# Altium schematic symbol library SamacSys.SchLib: 1235 symbols (part 5 of 13)
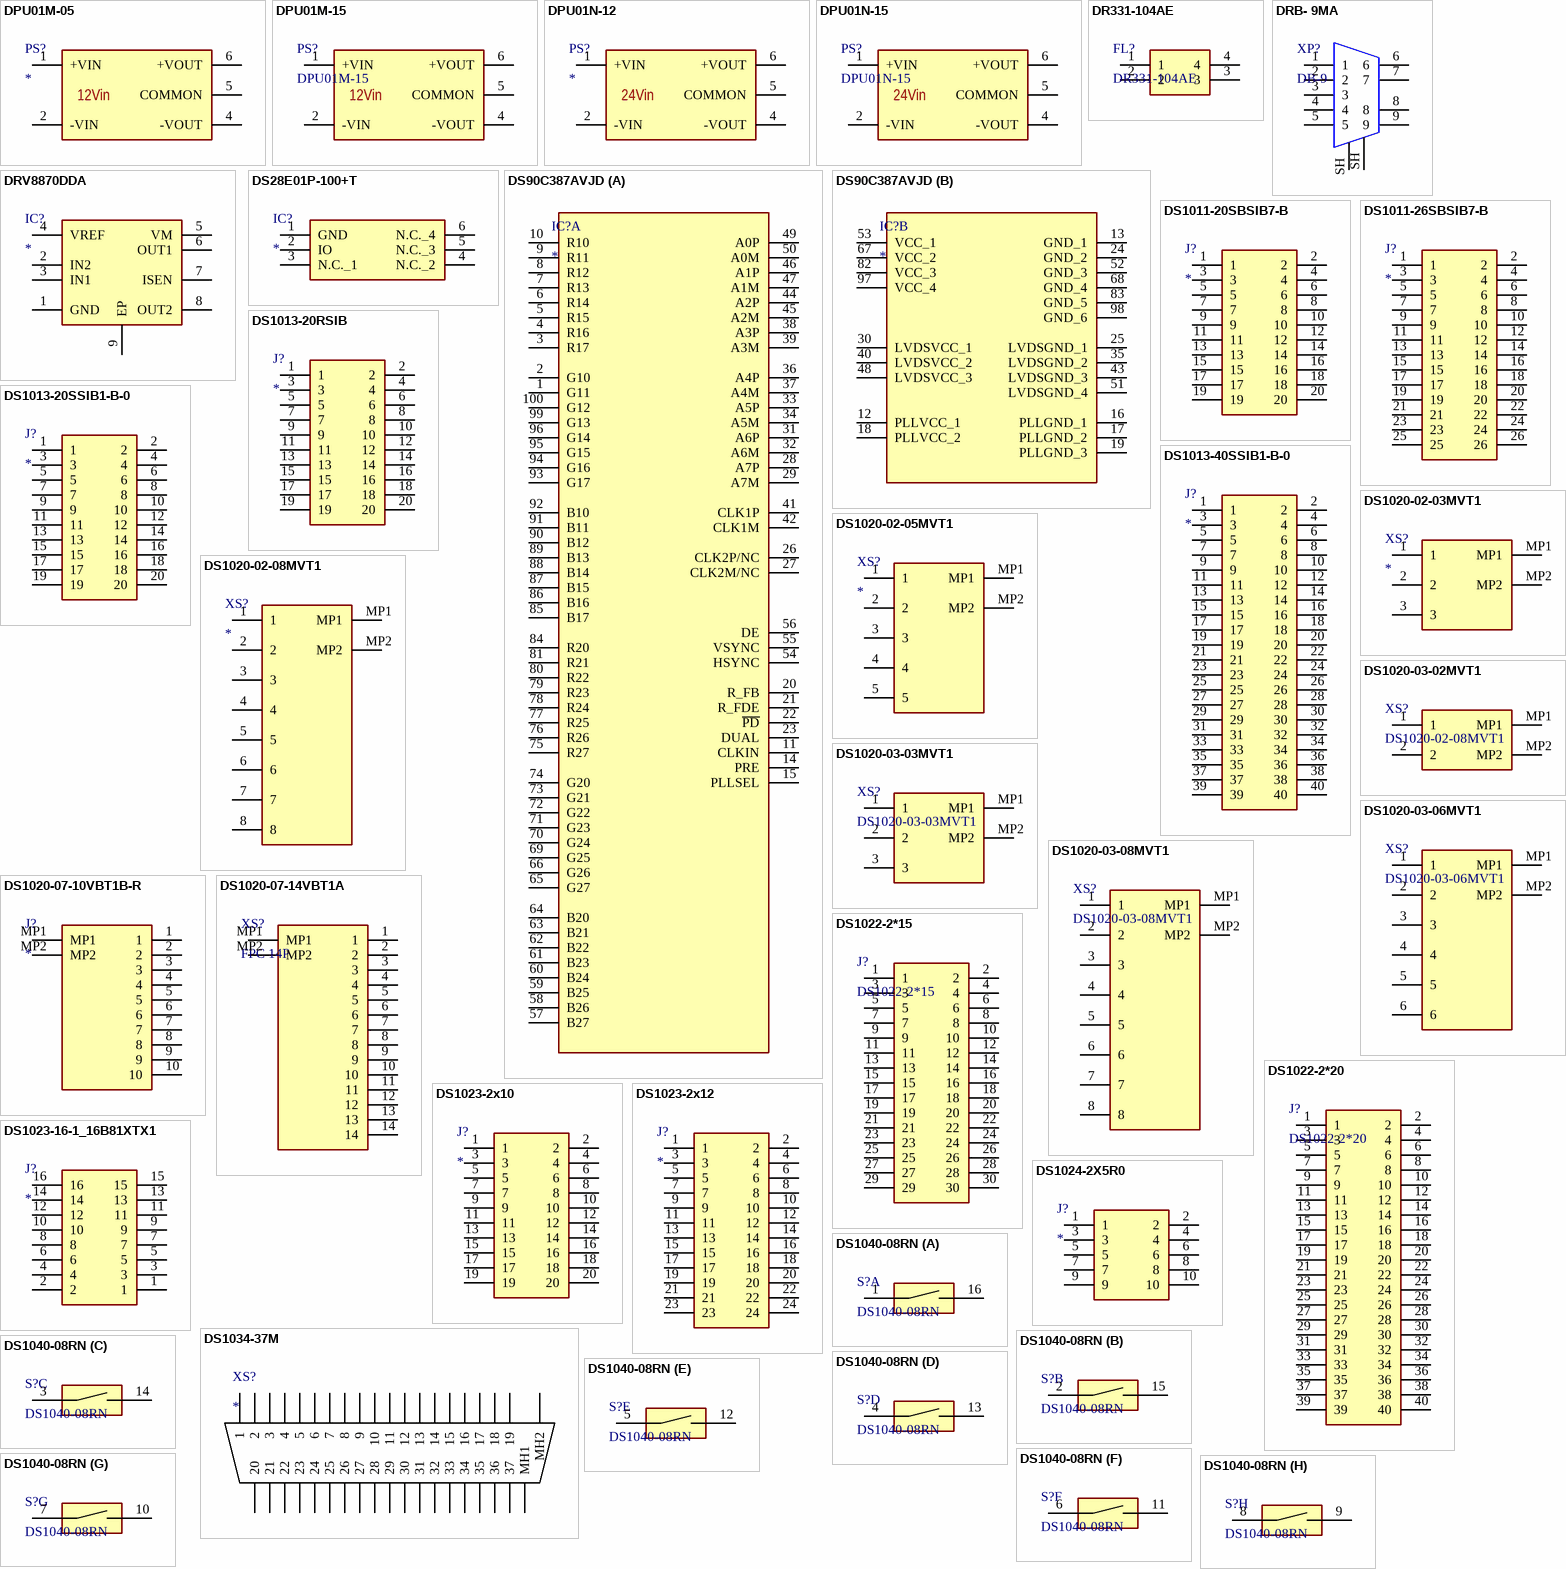
[diagram p49: symbols DPU01M-05 to DS1040-08RN]

## DPU01M-15
designator PS?
PS DC/DC, IN 10.8-13.2VDC, OUT +-15VDC; Manufacturer_Name: Mean Well; Datasheet Link: https://www.arrow.com/en/products/dpu01n-12/mean-well-enterprises; Height: 10.2mm; Manufacturer_Part_Number: DPU01M-15; Mouser Part Number: DPU01M-15; Mouser Price/Stock: https://www.mouser.co.uk/ProductDetail/MEAN-WELL/DPU01N-12?qs=5aG0NVq1C4yTyMl3DWRvqA%3D%3D; Arrow Part Number: DPU01M-15; Arrow Price/Stock: https://www.arrow.com/en/products/dpu01n-12/mean-well-enterprises
footprint DPU01
pins: 1 +VIN, 2 -VIN, 4 -VOUT, 5 COMMON, 6 +VOUT
text: 12Vin

## DPU01N-12
designator PS?
PS DC/DC, IN 21.6-26.4VDC, OUT +-12VDC; Manufacturer_Name: Mean Well; Manufacturer_Part_Number: DPU01N-12; Datasheet Link: https://www.arrow.com/en/products/dpu01n-12/mean-well-enterprises; Height: 10.2mm; Mouser Part Number: 709-DPU01N-12; Mouser Price/Stock: https://www.mouser.co.uk/ProductDetail/MEAN-WELL/DPU01N-12?qs=5aG0NVq1C4yTyMl3DWRvqA%3D%3D; Arrow Part Number: DPU01N-12; Arrow Price/Stock: https://www.arrow.com/en/products/dpu01n-12/mean-well-enterprises
footprint DPU01
pins: 1 +VIN, 2 -VIN, 4 -VOUT, 5 COMMON, 6 +VOUT
text: 24Vin

## DPU01N-15
designator PS?
PS DC/DC, IN 21.6-26.4VDC, OUT +-15VDC; Manufacturer_Name: Mean Well; Datasheet Link: https://www.arrow.com/en/products/dpu01n-12/mean-well-enterprises; Height: 10.2mm; Manufacturer_Part_Number: DPU01N-15; Mouser Part Number: DPU01N-15; Mouser Price/Stock: https://www.mouser.co.uk/ProductDetail/MEAN-WELL/DPU01N-12?qs=5aG0NVq1C4yTyMl3DWRvqA%3D%3D; Arrow Part Number: DPU01N-15; Arrow Price/Stock: https://www.arrow.com/en/products/dpu01n-12/mean-well-enterprises
footprint DPU01
pins: 1 +VIN, 2 -VIN, 4 -VOUT, 5 COMMON, 6 +VOUT
text: 24Vin

## DR331-104AE
designator FL?
CMC 470UH 500MA 2LN SMD; Manufacturer_Name: Bourns; Manufacturer_Part_Number: DR331-105BE; Datasheet Link: http://uk.rs-online.com/web/p/products/8749687; Mouser Part Number: 652-DR331-105BE; Mouser Price/Stock: https://www.mouser.co.uk/ProductDetail/Bourns/DR331-105BE?qs=CrTVAl0CcnKk6%252BoOsQlt3w%3D%3D; Arrow Part Number: DR331-105BE; Arrow Price/Stock: https://www.arrow.com/en/products/dr331-105be/bourns?utm_currency=USD&region=nac
footprint DR331
pins: 1, 2, 3, 4

## DRB- 9MA
designator XP?, comment DB-9
Connector, DB-9, PCB Right Angle; Manufacturer_Name: Connfly; Manufacturer_Part_Number: DBB-9F (DS1034-09F); Datasheet Link: https://static.chipdip.ru/lib/761/DOC000761659.pdf; System: Connector
footprint DRB-9MA_DS1037-9M
pins: 1, 2, 3, 4, 5, 6, 7, 8, 9, SH 9, SH 10

## DRV8870DDA
designator IC?
3.6-A Brushed DC Motor Driver (PWM Control); Manufacturer_Name: Texas Instruments; Manufacturer_Part_Number: DRV8870DDA; Datasheet Link: https://www.ti.com/lit/ds/symlink/drv8870.pdf?ts=1619515567456&ref_url=https%253A%252F%252Fwww.ti.com%252Fmotor-drivers%252Fbrushed-dc-bdc-drivers%252Fproducts.html; Height: 1.7mm; Mouser Part Number: 595-DRV8870DDA; Mouser Price/Stock: https://www.mouser.co.uk/ProductDetail/Texas-Instruments/DRV8870DDA?qs=Fobv33ltQGiS4dfPU1fBcw%3D%3D; Arrow Part Number: DRV8870DDA; Arrow Price/Stock: https://www.arrow.com/en/products/drv8870dda/texas-instruments?region=nac
footprint SOIC127P600X170-9N
pins: 1 GND, 2 IN2, 3 IN1, 4 VREF, 5 VM, 6 OUT1, 7 ISEN, 8 OUT2, 9 EP

## DS28E01P-100+T
designator IC?
Integrated Circuit; Manufacturer_Name: Analog Devices; Manufacturer_Part_Number: DS28E01P-100+T; Datasheet Link: https://datasheets.maximintegrated.com/en/ds/DS28E01-100.pdf; Height: 1.5mm; Mouser Part Number: 700-DS28E01P-100+T; Mouser Price/Stock: https://www.mouser.co.uk/ProductDetail/Analog-Devices-Maxim-Integrated/DS28E01P-100%2bT?qs=U8%2FOE6X5Fv%2F68qF%252BXjcMvQ%3D%3D; Arrow Part Number: DS28E01P-100+T; Arrow Price/Stock: https://www.arrow.com/en/products/ds28e01p-100t/maxim-integrated?region=nac
footprint DS28E01P100T
pins: 1 GND, 2 IO, 3 N.C._1, 4 N.C._2, 5 N.C._3, 6 N.C._4

## DS90C387AVJD
designator IC?
Integrated Circuit; Manufacturer_Name: Texas Instruments; Manufacturer_Part_Number: DS90C387AVJD; Datasheet Link: https://www.ti.com/lit/gpn/DS90C387A; Height: 1.2mm; Mouser Part Number: 926-DS90C387AVJD; Mouser Price/Stock: https://www.mouser.co.uk/ProductDetail/Texas-Instruments/DS90C387AVJD?qs=7X5t%252BdzoRHBiEdfCkch%2FBQ%3D%3D
footprint QFP50P1600X1600X120-100N
part A pins: 1 G11, 2 G10, 3 R17, 4 R16, 5 R15, 6 R14, 7 R13, 8 R12, 9 R11, 10 R10, 11 CLKIN, 14 PRE, 15 PLLSEL, 20 R_FB, 21 R_FDE, 22 ~{PD}, 23 DUAL, 26 CLK2P/NC, 27 CLK2M/NC, 28 A7P, 29 A7M, 31 A6P, 32 A6M, 33 A5P, 34 A5M, 36 A4P, 37 A4M, 38 A3P, 39 A3M, 41 CLK1P, 42 CLK1M, 44 A2P, 45 A2M, 46 A1P, 47 A1M, 49 A0P, 50 A0M, 54 HSYNC, 55 VSYNC, 56 DE, 57 B27, 58 B26, 59 B25, 60 B24, 61 B23, 62 B22, 63 B21, 64 B20, 65 G27, 66 G26, 69 G25, 70 G24, 71 G23, 72 G22, 73 G21, 74 G20, 75 R27, 76 R26, 77 R25, 78 R24, 79 R23, 80 R22, 81 R21, 84 R20, 85 B17, 86 B16, 87 B15, 88 B14, 89 B13, 90 B12, 91 B11, 92 B10, 93 G17, 94 G16, 95 G15, 96 G14, 99 G13, 100 G12
part B pins: 12 PLLVCC_1, 13 GND_1, 16 PLLGND_1, 17 PLLGND_2, 18 PLLVCC_2, 19 PLLGND_3, 24 GND_2, 25 LVDSGND_1, 30 LVDSVCC_1, 35 LVDSGND_2, 40 LVDSVCC_2, 43 LVDSGND_3, 48 LVDSVCC_3, 51 LVDSGND_4, 52 GND_3, 53 VCC_1, 67 VCC_2, 68 GND_4, 82 VCC_3, 83 GND_5, 97 VCC_4, 98 GND_6

## DS1011-20SBSIB7-B
designator J?
Connector; Manufacturer_Name: CONNFLY Elec; Manufacturer_Part_Number: DS1011-20SBSIB7-B; Datasheet Link: http://en.connfly.group/static/upload/file//DS1011.pdf; Height: 28.25mm
footprint DS101120SBSIB7B
pins: 1, 2, 3, 4, 5, 6, 7, 8, 9, 10, 11, 12, 13, 14, 15, 16, 17, 18, 19, 20

## DS1011-26SBSIB7-B
designator J?
Connector; Manufacturer_Name: CONNFLY Elec; Manufacturer_Part_Number: DS1011-20SBSIB7-B; Datasheet Link: http://en.connfly.group/static/upload/file//DS1011.pdf; Height: 28.25mm
footprint DS101126SBSIB7B (Footprint not found)
pins: 1, 2, 3, 4, 5, 6, 7, 8, 9, 10, 11, 12, 13, 14, 15, 16, 17, 18, 19, 20, 21, 22, 23, 24, 25, 26

## DS1013-20RSIB
designator J?
Connector; Manufacturer_Name: Connfly; Manufacturer_Part_Number: DS1013-20RSIB; Datasheet Link: https://cdn.ozdisan.com/ETicaret_Dosya/346528_6335485.pdf; Height: 9.48mm
footprint SHDRRA20W69P254X254_2X10_3300X930X948P
pins: 1, 2, 3, 4, 5, 6, 7, 8, 9, 10, 11, 12, 13, 14, 15, 16, 17, 18, 19, 20

## DS1013-20SSIB1-B-0
designator J?
Connector; Manufacturer_Name: Connfly; Manufacturer_Part_Number: DS1013-20SSIB1-B-0; Datasheet Link: https://www.tme.eu/Document/e9117e1c80532ff2c20cc520b4694ed9/DS1013.pdf; Height: 9.55mm
footprint SHDR20W69P254X254_2X10_3300X910X955P (Footprint not found)
pins: 1, 2, 3, 4, 5, 6, 7, 8, 9, 10, 11, 12, 13, 14, 15, 16, 17, 18, 19, 20

## DS1013-40SSIB1-B-0
designator J?
Connector; Manufacturer_Name: Connfly; Manufacturer_Part_Number: DS1013-40SSIB1-B-0; Datasheet Link: https://en.connfly.com/static/upload/file/pdf/DS1013.pdf; Height: 9.48mm
footprint DS101340SSIB1B0
pins: 1, 2, 3, 4, 5, 6, 7, 8, 9, 10, 11, 12, 13, 14, 15, 16, 17, 18, 19, 20, 21, 22, 23, 24, 25, 26, 27, 28, 29, 30, 31, 32, 33, 34, 35, 36, 37, 38, 39, 40

## DS1020-02-03MVT1
designator XS?
Connector; Manufacturer_Name: Connfly; Manufacturer_Part_Number: DS1020-02-03MVT1; Datasheet Link: https://en.connfly.com/static/upload/file//DS1020-02.pdf
footprint DS1020-02-03MVT1
pins: 1, 2, 3, MP1, MP2

## DS1020-02-05MVT1
designator XS?
Connector; Manufacturer_Name: Connfly; Manufacturer_Part_Number: DS1020-02-05MVT1; Datasheet Link: https://en.connfly.com/static/upload/file//DS1020-02.pdf
footprint DS1020-02-05MVT1
pins: 1, 2, 3, 4, 5, MP1, MP2

## DS1020-02-08MVT1
designator XS?
Connector; Manufacturer_Name: Connfly; Manufacturer_Part_Number: DS1020-02-08MVT1; Datasheet Link: https://en.connfly.com/static/upload/file//DS1020-02.pdf
footprint DS1020-02-08MVT1
pins: 1, 2, 3, 4, 5, 6, 7, 8, MP1, MP2

## DS1020-03-02MVT1
designator XS?, comment DS1020-02-08MVT1
CONN 1.25mm Wafer V/T SMT & Crimp Type; Manufacturer_Name: Connfly; Manufacturer_Part_Number: DS1020-03-02MVT1; Datasheet Link: https://en.connfly.com/static/upload/file//DS1020-02.pdf
footprint DS1020-03-02MVT1 (Molex 53398-4002)
pins: 1, 2, MP1, MP2

## DS1020-03-03MVT1
designator XS?
CONN 1.25mm Wafer V/T SMT & Crimp Type; Manufacturer_Name: Connfly; Datasheet Link: https://en.connfly.com/static/upload/file//DS1020-02.pdf; Manufacturer_Part_Number: DS1020-03-03MVT1
footprint DS1020-03-03MVT1 (Molex 53398-4002)
pins: 1, 2, 3, MP1, MP2

## DS1020-03-06MVT1
designator XS?
CONN 1.25mm Wafer V/T SMT & Crimp Type; Manufacturer_Name: Connfly; Datasheet Link: https://en.connfly.com/static/upload/file//DS1020-02.pdf; Manufacturer_Part_Number: DS1020-03-06MVT1
footprint DS1020-03-06MVT1 (Molex 53398-4008 / Molex 53398-0871)
pins: 1, 2, 3, 4, 5, 6, MP1, MP2

## DS1020-03-08MVT1
designator XS?
CONN 1.25mm Wafer V/T SMT & Crimp Type; Manufacturer_Name: Connfly; Datasheet Link: https://en.connfly.com/static/upload/file//DS1020-02.pdf; Manufacturer_Part_Number: DS1020-03-08MVT1
footprint DS1020-03-08MVT1 (Molex 53398-4008)
pins: 1, 2, 3, 4, 5, 6, 7, 8, MP1, MP2

## DS1020-07-10VBT1B-R
designator J?
Connector; Manufacturer_Name: CONNFLY Elec; Manufacturer_Part_Number: DS1020-07-10VBT1B-R; Datasheet Link: http://en.connfly.group/static/upload/file/pdf/DS1020-07.pdf; Height: 2.75mm
footprint DS10200710VBT1BR
pins: 1, 2, 3, 4, 5, 6, 7, 8, 9, 10, MP1, MP2

## DS1020-07-14VBT1A
designator XS?, comment FPC 14P
Connector FPC 14P 1mm; Manufacturer_Name: CONNFLY Elec; Manufacturer_Part_Number: DS1020-07-10VBT1B-R; Datasheet Link: http://en.connfly.group/static/upload/file/pdf/DS1020-07.pdf; Height: 2.75mm
footprint DS10200714VBT
pins: 1, 2, 3, 4, 5, 6, 7, 8, 9, 10, 11, 12, 13, 14, MP1, MP2

## DS1022-2*15
designator J?
SMT header, 2x15
footprint DS1022-04-2x15 (Footprint not found)
pins: 1, 2, 3, 4, 5, 6, 7, 8, 9, 10, 11, 12, 13, 14, 15, 16, 17, 18, 19, 20, 21, 22, 23, 24, 25, 26, 27, 28, 29, 30

## DS1022-2*20
designator J?
SMT header, 2x20
footprint DS1022-04-2x20
pins: 1, 2, 3, 4, 5, 6, 7, 8, 9, 10, 11, 12, 13, 14, 15, 16, 17, 18, 19, 20, 21, 22, 23, 24, 25, 26, 27, 28, 29, 30, 31, 32, 33, 34, 35, 36, 37, 38, 39, 40

## DS1023-2x10
designator J?
Connector; Manufacturer_Name: Connfly; Manufacturer_Part_Number: DS1023-2*8S21; Datasheet Link: https://www.tme.eu/Document/efd0203e2d3a140765df98191085ea88/DS1023.pdf; Height: 8.5mm
footprint RHDR20W60P254_2X10
pins: 1, 2, 3, 4, 5, 6, 7, 8, 9, 10, 11, 12, 13, 14, 15, 16, 17, 18, 19, 20

## DS1023-2x12
designator J?
Connector; Manufacturer_Name: Connfly; Manufacturer_Part_Number: DS1023-2*8S21; Datasheet Link: https://www.tme.eu/Document/efd0203e2d3a140765df98191085ea88/DS1023.pdf; Height: 8.5mm
footprint RHDR24W60P254_2X12
pins: 1, 2, 3, 4, 5, 6, 7, 8, 9, 10, 11, 12, 13, 14, 15, 16, 17, 18, 19, 20, 21, 22, 23, 24

## DS1023-16-1_16B81XTX1
designator J?
Connector; Manufacturer_Name: Connfly; Manufacturer_Part_Number: DS1023-16-1*16B81XTX1
footprint DS102316116B81XTX1
pins: 1, 2, 3, 4, 5, 6, 7, 8, 9, 10, 11, 12, 13, 14, 15, 16

## DS1024-2X5R0
designator J?
Connector; Manufacturer_Name: Connfly; Manufacturer_Part_Number: DS1024-2X5R0; Datasheet Link: http://cn.connfly.group/static/upload/file/pdf/DS1024.pdf; Height: 5.25mm
footprint RHDRRA10W60P254X254_2X5_1320X850X525P
pins: 1, 2, 3, 4, 5, 6, 7, 8, 9, 10

## DS1034-37M
designator XS?
Connector, DB37; Manufacturer_Name: Connfly; Manufacturer_Part_Number: DS1034-37M; Datasheet Link: https://static.chipdip.ru/lib/638/DOC046638059.pdf; Height: 12.23mm
footprint DS1034-37M
pins: 1, 2, 3, 4, 5, 6, 7, 8, 9, 10, 11, 12, 13, 14, 15, 16, 17, 18, 19, 20, 21, 22, 23, 24, 25, 26, 27, 28, 29, 30, 31, 32, 33, 34, 35, 36, 37, MH1, MH2

## DS1040-08RN
designator S?
DIP Switch 8P; Manufacturer_Name: KLS; Manufacturer_Part_Number: KLS7-DST-04-R; Datasheet Link: https://www.klsconnector.com/wp-content/uploads/20200522104221KLS7-DST.pdf; Height: 6.6
footprint KLS7-DS08-B
part A pins: 1, 16
part B pins: 2, 15
part C pins: 3, 14
part D pins: 4, 13
part E pins: 5, 12
part F pins: 6, 11
part G pins: 7, 10
part H pins: 8, 9

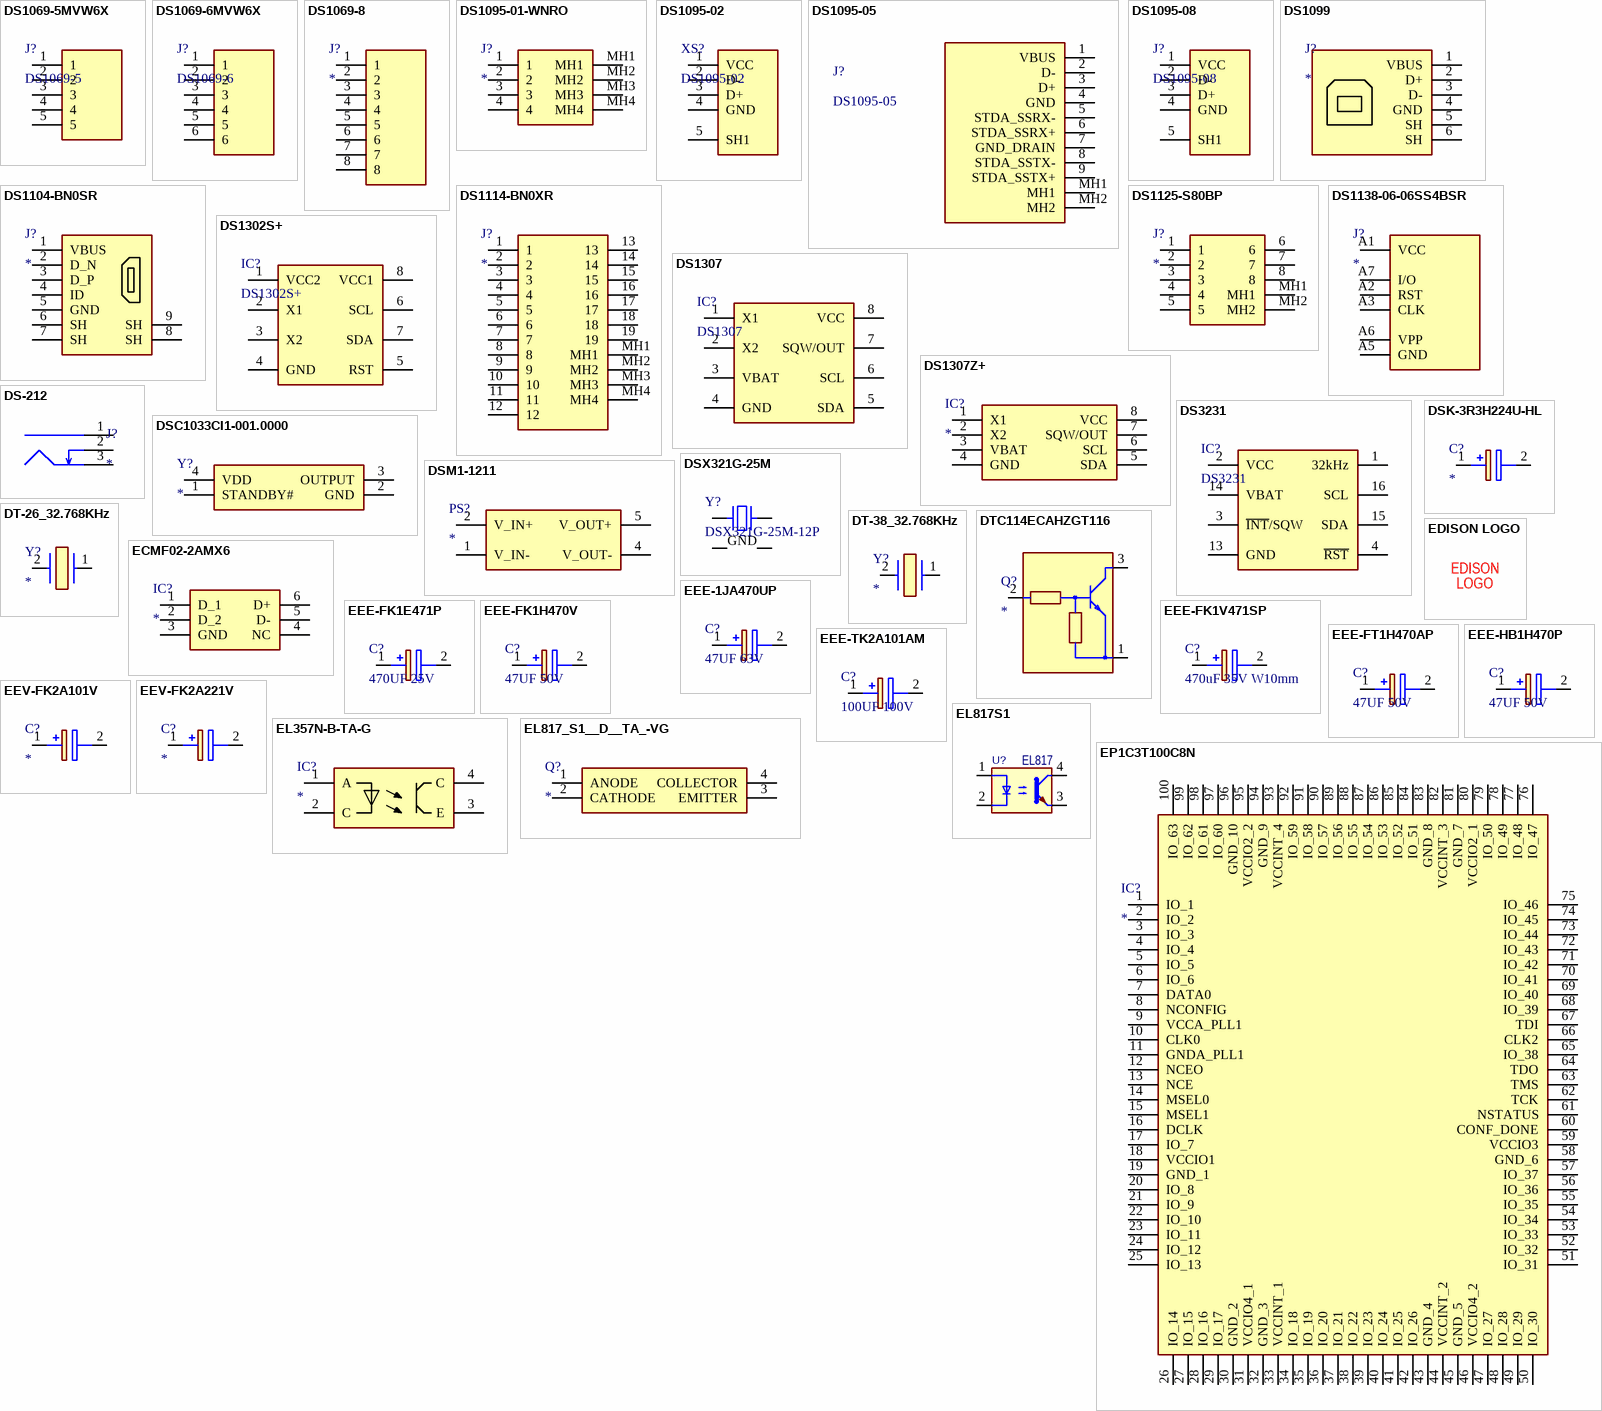
[diagram p14: symbols DS1069-5MVW6X to EP1C3T100C8N]

## DS1069-5MVW6X
designator J?, comment DS1069-5
Connector; Manufacturer_Name: Connfly; Datasheet Link: https://static.chipdip.ru/lib/525/DOC059525714.pdf; Height: 7mm; Manufacturer_Part_Number: DS1069-5
footprint DS1069-5 (Footprint not found)
pins: 1, 2, 3, 4, 5

## DS1069-6MVW6X
designator J?, comment DS1069-6
Connector; Manufacturer_Name: Connfly; Datasheet Link: https://static.chipdip.ru/lib/525/DOC059525714.pdf; Height: 7mm; Manufacturer_Part_Number: DS1069-6
footprint DS1069-6
pins: 1, 2, 3, 4, 5, 6

## DS1069-8
designator J?
Connector; Manufacturer_Name: Connfly; Manufacturer_Part_Number: DS1069-8; Datasheet Link: https://static.chipdip.ru/lib/413/DOC001413777.pdf; Height: 7mm
footprint SHDR8W64P0X250_1X8_2240X575X700P
pins: 1, 2, 3, 4, 5, 6, 7, 8

## DS1095-01-WNRO
designator J?
Connector; Manufacturer_Name: Connfly; Manufacturer_Part_Number: DS1095-01-WNRO; Height: 14.5mm
footprint DS109501WNRO (Footprint not found)
pins: 1, 2, 3, 4, MH1, MH2, MH3, MH4

## DS1095-02
designator XS?
USB 2.0 Type-A Horisontal SMD Connector; Manufacturer_Name: Connfly; Datasheet Link: https://en.connfly.com/static/upload/file/pdf/DS1095-08.pdf; Manufacturer_Part_Number: DS1095-02
footprint DS1095-02 (Footprint not found)
pins: 1 VCC, 2 D-, 3 D+, 4 GND, 5 SH1

## DS1095-05
designator J?
USB 3.0 Connector, Type A; Manufacturer_Name: Connfly; Datasheet Link: https://static.chipdip.ru/lib/360/DOC016360676.pdf; Height: 7.2mm; Manufacturer_Part_Number: DS1095-05
footprint DS1095-05
pins: 1 VBUS, 2 D-, 3 D+, 4 GND, 5 STDA_SSRX-, 6 STDA_SSRX+, 7 GND_DRAIN, 8 STDA_SSTX-, 9 STDA_SSTX+, MH1, MH2

## DS1095-08
designator J?
USB 2.0 Type-A Vertical Connector; Manufacturer_Name: Connfly; Datasheet Link: https://en.connfly.com/static/upload/file/pdf/DS1095-08.pdf; Manufacturer_Part_Number: DS1095-08
footprint DS1095-08 (Footprint not found)
pins: 1 VCC, 2 D-, 3 D+, 4 GND, 5 SH1

## DS1099
designator J?
USB 2.0 Type B; Manufacturer_Name: Connfly; Manufacturer_Part_Number: DS1099; Datasheet Link: https://static.chipdip.ru/lib/402/DOC014402409.pdf
footprint DS1099 (USB Type B)
pins: 1 VBUS, 2 D+, 3 D-, 4 GND, 5 SH, 6 SH

## DS1104-BN0SR
designator J?
Mini USB, SMD, Right Angle; Manufacturer_Name: Connfly; Manufacturer_Part_Number: DS1104-BN0SR; Datasheet Link: https://www.tme.eu/en/Document/609ffd1fdbc4bea9351dc791fd9a9696/musb-g5p.pdf; Height: 3.95mm
footprint DS1104BN0SR
pins: 1 VBUS, 2 D_N, 3 D_P, 4 ID, 5 GND, 6 SH, 7 SH, 8 SH, 9 SH

## DS1114-BN0XR
designator J?
Connector, HDMI; Manufacturer_Name: Connfly; Manufacturer_Part_Number: DS1114-BN0XR; Datasheet Link: https://www.tme.eu/Document/e5eb14fdda0b30b714124f3620810438/DS1114.pdf; Height: 6.32mm
footprint DS1114BN0XR (Footprint not found)
pins: 1, 2, 3, 4, 5, 6, 7, 8, 9, 10, 11, 12, 13, 14, 15, 16, 17, 18, 19, MH1, MH2, MH3, MH4

## DS1125-S80BP
designator J?
Connector, RJ-45; Manufacturer_Name: Connfly; Manufacturer_Part_Number: DS1125-S80BP; Datasheet Link: https://img.ozdisan.com/ETicaret_Dosya/465191_8531010.PDF; Height: 12.58mm
footprint DS1125S80BP
pins: 1, 2, 3, 4, 5, 6, 7, 8, MH1, MH2

## DS1138-06-06SS4BSR
designator J?
SIM card socket; Manufacturer_Name: Connfly; Manufacturer_Part_Number: DS1138-06-06SS4BSR; Datasheet Link: https://datasheet.lcsc.com/szlcsc/1811031920_CONNFLY-Elec-DS1138-06-06SS4BSR_C96105.pdf; Height: 2.1mm
footprint DS11380606SS4BSR
pins: A1 VCC, A2 RST, A3 CLK, A5 GND, A6 VPP, A7 I/O

## DS1302S+
designator IC?
RTC chip, battery input; Manufacturer_Name: Analog Devices; Datasheet Link: https://datasheets.maximintegrated.com/en/ds/DS1302.pdf; Height: 2.28mm; Manufacturer_Part_Number: DS1302S+; Mouser Part Number: 700-DS1302S; Mouser Price/Stock: https://www.mouser.co.uk/ProductDetail/Analog-Devices-Maxim-Integrated/DS1302S%2b?qs=0Y9aZN%252BMVCWU8gw7pnisYw%3D%3D; Arrow Part Number: DS1302S+; Arrow Price/Stock: https://www.arrow.com/en/products/ds1302s/analog-devices?region=nac
footprint SOIC127P787X228-8N
pins: 1 VCC2, 2 X1, 3 X2, 4 GND, 5 RST, 6 SCL, 7 SDA, 8 VCC1

## DS1307
designator IC?
RTC chip, 5V, 64 x 8, Serial, I2C; Manufacturer_Name: Analog Devices; Datasheet Link: https://static.chipdip.ru/lib/834/DOC003834620.pdf; Height: 2.28mm; Manufacturer_Part_Number: DS1307; Mouser Part Number: 700-DS1302S; Mouser Price/Stock: https://www.mouser.co.uk/ProductDetail/Analog-Devices-Maxim-Integrated/DS1302S%2b?qs=0Y9aZN%252BMVCWU8gw7pnisYw%3D%3D; Arrow Part Number: DS1302S+; Arrow Price/Stock: https://www.arrow.com/en/products/ds1302s/analog-devices?region=nac
footprint SOIC127P787X228-8N
pins: 1 X1, 2 X2, 3 VBAT, 4 GND, 5 SDA, 6 SCL, 7 SQW/OUT, 8 VCC

## DS1307Z+
designator IC?
Integrated Circuit; Manufacturer_Name: Analog Devices; Manufacturer_Part_Number: DS1307Z+; Datasheet Link: http://datasheets.maximintegrated.com/en/ds/DS1307.pdf; Height: 1.75mm; Mouser Part Number: 700-DS1307Z; Mouser Price/Stock: https://www.mouser.co.uk/ProductDetail/Analog-Devices-Maxim-Integrated/DS1307Z%2b?qs=0Y9aZN%252BMVCUvNDMAh9aCtw%3D%3D; Arrow Part Number: DS1307Z+; Arrow Price/Stock: https://www.arrow.com/en/products/ds1307z/analog-devices?utm_currency=USD&region=nac
footprint SOIC127P600X175-8N
pins: 1 X1, 2 X2, 3 VBAT, 4 GND, 5 SDA, 6 SCL, 7 SQW/OUT, 8 VCC

## DS3231
designator IC?
RTC chip, 3V3, I2C, Integrated Crystal; Manufacturer_Name: Analog Devices; Datasheet Link: https://www.elitan.ru/pdf/0/1/5/7/2/01572100.pdf; Height: 2.28mm; Manufacturer_Part_Number: DS3231
footprint SOIC127P1030X265-16N
pins: 1 32kHz, 2 VCC, 3 ~{INT}/SQW, 4 ~{RST}, 13 GND, 14 VBAT, 15 SDA, 16 SCL

## DS-212
designator J?
DC Barrel Dragon City; Manufacturer_Name: TE Connectivity; Manufacturer_Part_Number: 292303-1; Datasheet Link: http://docs-asia.electrocomponents.com/webdocs/06d0/0900766b806d08c4.pdf; Mouser Part Number: 571-292303-1; Mouser Price/Stock: https://www.mouser.co.uk/ProductDetail/TE-Connectivity/292303-1?qs=G%2F5vCLrg9vx2OsUPTgR%2F%252BQ%3D%3D; Arrow Part Number: 292303-1; Arrow Price/Stock: https://www.arrow.com/en/products/292303-1/te-connectivity?region=nac
footprint DS_212 (DC Barrel Jack)
pins: 1, 2, 3

## DSC1033CI1-001.0000
designator Y?
Crystal or Oscillator; Manufacturer_Name: Microchip; Manufacturer_Part_Number: DSC1033CI1-001.0000; Datasheet Link: https://componentsearchengine.com/Datasheets/1/DSC1033CI1-001.0000.pdf; Height: 0.9mm; Mouser Part Number: 579-C1033CI10010000; Mouser Price/Stock: https://www.mouser.com/Search/Refine.aspx?Keyword=579-C1033CI10010000; Arrow Part Number: DSC1033CI1-001.0000; Arrow Price/Stock: https://www.arrow.com/en/products/dsc1033ci1-001.0000/microchip-technology
footprint DSC1033CI10010000
pins: 1 STANDBY#, 2 GND, 3 OUTPUT, 4 VDD

## DSK-3R3H224U-HL
designator C?
Capacitor Polarised; Manufacturer_Name: Elna; Manufacturer_Part_Number: DSK-3R3H224U-HL; Datasheet Link: https://componentsearchengine.com/Datasheets/1/DSK-3R3H224U-HL.pdf; Height: 3mm; Mouser Part Number: 555-DSK3R3H224U-HL; Mouser Price/Stock: https://www.mouser.co.uk/ProductDetail/Elna/DSK-3R3H224U-HL?qs=QQsyD2Kvh2ftLwsh6FwcaA%3D%3D
footprint DSK3R3H334THL
pins: 1 +, 2 -

## DSM1-1211
designator PS?
Power Supply; Manufacturer_Name: PAIRUI; Manufacturer_Part_Number: DSM1-0311; Datasheet Link: https://static.chipdip.ru/lib/227/DOC013227182.pdf; Height: 6.5mm; Arrow Part Number: DSM1-0311
footprint SOP254P1120X650-8N
pins: 1 V_IN-, 2 V_IN+, 4 V_OUT-, 5 V_OUT+

## DSX321G-25M
designator Y?, comment DSX321G-25M-12P
Crystal or Oscillator; Manufacturer_Name: KDS Daishinku; Datasheet Link: https://datasheet.lcsc.com/szlcsc/KDS-Daishinku-KDS-DSX321G-20M_C110936.pdf; Height: 1mm; Manufacturer_Part_Number: DSX321G-25M
footprint DSX321G20M
pins: 1, 2 GND, 3, 4 GND

## DT-26_32.768KHz
designator Y?
Crystal or Oscillator; Manufacturer_Name: KDS Daishinku; Manufacturer_Part_Number: DT-26 32.768KHz; Datasheet Link: https://datasheet.lcsc.com/szlcsc/KDS-Daishinku-KDS-32-768KHz-12-5PF-20ppm_C93229.pdf; Height: 6.1mm
footprint DT-26_LAY
footprint DT26_STAND
pins: 1 CRYSTAL_1, 2 CRYSTAL_2

## DT-38_32.768KHz
designator Y?
Crystal or Oscillator; Manufacturer_Name: KDS Daishinku; Manufacturer_Part_Number: DT-38 32.768KHz; Datasheet Link: https://datasheet.lcsc.com/szlcsc/KDS-Daishinku-KDS-32-768KHz-12-5PF-20ppm_C93228.pdf; Height: 8.3mm
footprint DT3832768KHz
pins: 1 CRYSTAL_1, 2 CRYSTAL_2

## DTC114ECAHZGT116
designator Q?
Transistor RET NPN; Manufacturer_Name: ROHM Semiconductor; Manufacturer_Part_Number: DTC114ECAHZGT116; Datasheet Link: http://rohmfs.rohm.com/en/products/databook/datasheet/discrete/transistor/digital/dtc114ecahzg-e.pdf; Height: 1.2mm; Mouser Part Number: 755-DTC114ECAHZGT116; Mouser Price/Stock: https://www.mouser.co.uk/ProductDetail/ROHM-Semiconductor/DTC114ECAHZGT116?qs=4v%252BiZTmLVHHtk2EK1z3Tyg%3D%3D
footprint RK7002BMT116
pins: 1 E, 2 B, 3 C

## ECMF02-2AMX6
designator IC?
Integrated Circuit; Manufacturer_Name: STMicroelectronics; Manufacturer_Part_Number: ECMF02-2AMX6; Datasheet Link: https://www.st.com/resource/en/datasheet/ecmf02-2amx6.pdf; Height: 0.55mm; Mouser Part Number: 511-ECMF02-2AMX6; Mouser Price/Stock: https://www.mouser.co.uk/ProductDetail/STMicroelectronics/ECMF02-2AMX6?qs=raAh8RbVwI65u5gmT42%2Flg%3D%3D; Arrow Part Number: ECMF02-2AMX6; Arrow Price/Stock: https://www.arrow.com/en/products/ecmf02-2amx6/stmicroelectronics?utm_currency=USD&region=nac
footprint SON50P150X170X55-6N-D
pins: 1 D_1, 2 D_2, 3 GND, 4 NC, 5 D-, 6 D+

## EDISON LOGO
designator LOGO  (no BOM)
footprint EDISON LOGO
text: EDISON

## EEE-1JA470UP
designator C?, comment 47UF 63V
CAP ALUM 47UF 20% 63V SMD; Manufacturer_Name: Panasonic; Manufacturer_Part_Number: EEE-1JA470UP; Datasheet Link: http://industrial.panasonic.com/cdbs/www-data/pdf/RDE0000/ABA0000C1145.pdf; Height: 10.8mm; Mouser Part Number: 667-EEE-1JA470UP; Mouser Price/Stock: https://www.mouser.co.uk/ProductDetail/Panasonic/EEE-1JA470UP?qs=wEytwf7f49GdNyH4Gsu9jA%3D%3D; Arrow Part Number: EEE-1JA470UP; Arrow Price/Stock: https://www.arrow.com/en/products/eee-1ja470up/panasonic?region=nac
footprint EEHZT1E331UP
pins: 1 +, 2 -

## EEE-FK1E471P
designator C?, comment 470UF 25V
CAP ALUM 470UF 20% 25V SMD; Manufacturer_Name: Panasonic; Manufacturer_Part_Number: EEE-FK1E471P; Datasheet Link: http://industrial.panasonic.com/cdbs/www-data/pdf/RDE0000/ABA0000C1181.pdf; Mouser Part Number: 667-EEE-FK1E471P; Mouser Price/Stock: https://www.mouser.co.uk/ProductDetail/Panasonic/EEE-FK1E471P?qs=qE6bgDGEOCvvsolWS4cebg%3D%3D; Arrow Part Number: EEE-FK1E471P; Arrow Price/Stock: https://www.arrow.com/en/products/eee-fk1e471p/panasonic?region=europe
footprint EEEFK1V331P
pins: 1 +, 2 -

## EEE-FK1H470V
designator C?, comment 47UF 50V
CAP ALUM 47UF 20% 50V SMD; Manufacturer_Name: Panasonic; Manufacturer_Part_Number: EEE-FK1H470V; Datasheet Link: http://industrial.panasonic.com/cdbs/www-data/pdf/RDE0000/ABA0000C1181.pdf; Height: 6.5mm; Mouser Part Number: 667-EEE-FK1H470V; Mouser Price/Stock: https://www.mouser.co.uk/ProductDetail/Panasonic/EEE-FK1H470V?qs=GoZnPdyRfjYe051AhEzASQ%3D%3D; Arrow Part Number: EEE-FK1H470V; Arrow Price/Stock: https://www.arrow.com/en/products/eeefk1h470v/panasonic
footprint EEEFP0J331AV
pins: 1 +, 2 -

## EEE-FK1V471SP
designator C?, comment 470uF 35V W10mm
CAP ALUM 470UF 20% 35V SMD D10H10.5; Manufacturer_Name: Panasonic; Manufacturer_Part_Number: EEE-FK1V471SP; Datasheet Link: http://industrial.panasonic.com/cdbs/www-data/pdf/RDE0000/ABA0000C1251.pdf; Height: 12mm; Mouser Part Number: 667-EEE-FK1V471SP; Mouser Price/Stock: https://www.mouser.co.uk/ProductDetail/Panasonic/EEE-FK1V471SP?qs=zOMD8z%2Fhl68xqw9uR0oqiw%3D%3D; Arrow Part Number: EEE-FK1V471SP; Arrow Price/Stock: https://www.arrow.com/en/products/eee-fk1v471sp/panasonic?region=nac
footprint EEE0JA152UAP
pins: 1 +, 2 -

## EEE-FT1H470AP
designator C?, comment 47UF 50V
CAP ALUM 47UF 20% 50V SMD; Manufacturer_Name: Panasonic; Manufacturer_Part_Number: EEE-FT1H470AP; Datasheet Link: http://industrial.panasonic.com/cdbs/www-data/pdf/RDE0000/ABA0000C1240.pdf; Height: 7.8mm; Mouser Part Number: 667-EEE-FT1H470AP; Mouser Price/Stock: https://www.mouser.co.uk/ProductDetail/Panasonic/EEE-FT1H470AP?qs=CMJjuEs1%252BuGwCsNIEusjpA%3D%3D; Arrow Part Number: EEE-FT1H470AP; Arrow Price/Stock: https://www.arrow.com/en/products/eeeft1h470ap/panasonic?utm_currency=USD&region=nac
footprint EEE1AA101SP
pins: 1 +, 2 -

## EEE-HB1H470P
designator C?, comment 47UF 50V
CAP ALUM 47UF 20% 50V SMD; Manufacturer_Name: Panasonic; Manufacturer_Part_Number: EEE-HB1H470P; Datasheet Link: http://industrial.panasonic.com/cdbs/www-data/pdf/RDE0000/ABA0000C1157.pdf; Height: 12mm
footprint EEE0JA152UAP
pins: 1 +, 2 -

## EEE-TK2A101AM
designator C?, comment 100UF 100V
CAP ALUM 100UF 20% 100V SMD; Manufacturer_Name: Panasonic; Manufacturer_Part_Number: EEE-TK2A101AM; Datasheet Link: http://industrial.panasonic.com/cdbs/www-data/pdf/RDE0000/ABA0000C1190.pdf; Height: 17mm; Mouser Part Number: 667-EEE-TK2A101AM; Mouser Price/Stock: https://www.mouser.co.uk/ProductDetail/Panasonic/EEE-TK2A101AM?qs=tqvsmoK%252ByvGs76kdkQg9LQ%3D%3D; Arrow Part Number: EEE-TK2A101AM; Arrow Price/Stock: https://www.arrow.com/en/products/eee-tk2a101am/panasonic
footprint EEEFK0J682AM
pins: 1 +, 2 -

## EEV-FK2A101V
designator C?
Capacitor Polarised; Manufacturer_Name: Panasonic; Manufacturer_Part_Number: EEV-FK2A101V; Datasheet Link: http://industrial.panasonic.com/cdbs/www-data/pdf/RDE0000/ABA0000C1181.pdf; Height: 16.8mm; Mouser Part Number: 667-EEV-FK2A101V; Mouser Price/Stock: https://www.mouser.co.uk/ProductDetail/Panasonic/EEV-FK2A101V?qs=MtOUKumLmnaVkoWQWMGNWA%3D%3D
footprint EEEFK0J682AV
pins: 1 +, 2 -

## EEV-FK2A221V
designator C?
Capacitor Polarised; Manufacturer_Name: Panasonic; Manufacturer_Part_Number: EEV-FK2A221V; Datasheet Link: http://industrial.panasonic.com/cdbs/www-data/pdf/RDE0000/ABA0000C1181.pdf; Height: 17.3mm; Mouser Part Number: 667-EEV-FK2A221V; Mouser Price/Stock: https://www.mouser.co.uk/ProductDetail/Panasonic/EEV-FK2A221V?qs=MtOUKumLmnbViHOncnEZJA%3D%3D
footprint EEEFK0J103SV
pins: 1 +, 2 -

## EL357N-B-TA-G
designator IC?
Integrated Circuit; Manufacturer_Name: Everlight Elec; Manufacturer_Part_Number: EL357N-B-TA-G; Datasheet Link: https://datasheet.lcsc.com/szlcsc/1809192312_Everlight-Elec-EL357N-B-TA-G_C6649.pdf; Height: 2mm; LCSC Part #: C725794
footprint SOP254P700X200-4N
pins: 1 A, 2 C, 3 E, 4 C

## EL817_S1__D__TA_-VG
designator Q?
Transistor; Manufacturer_Name: Everlight; Manufacturer_Part_Number: EL817(S1)(D)(TA)-VG; Datasheet Link: http://www.mouser.com/ds/2/143/201407061834389632-598371.pdf; Height: 3.9mm; Mouser Part Number: 638-EL817S1DTA-VG; Mouser Price/Stock: https://www.mouser.co.uk/ProductDetail/Everlight/EL817S1DTA-VG?qs=8PzhAHr7IdOwcx8dMEEN7g%3D%3D
footprint SOP254P1030X390-4N
pins: 1 ANODE, 2 CATHODE, 3 EMITTER, 4 COLLECTOR

## EL817S1
designator U?, comment EL817
OPTOISOLATOR 5KV 1CH TRANS 4-SMD; Value: EL817
footprint SOP254P1016X460-4N
pins: 1, 2, 3, 4

## EP1C3T100C8N
designator IC?
Integrated Circuit; Manufacturer_Name: Intel; Manufacturer_Part_Number: EP1C3T100C8N; Datasheet Link: https://media.digikey.com/pdf/Data%20Sheets/Altera%20PDFs/Cyclone_FPGA_Family.pdf; Height: 1.2mm; Mouser Part Number: 989-EP1C3T100C8N; Mouser Price/Stock: https://www.mouser.co.uk/ProductDetail/Intel-Altera/EP1C3T100C8N?qs=P2rvyRAZsYhrWhd9QNt1Qg%3D%3D; Arrow Part Number: EP1C3T100C8N; Arrow Price/Stock: https://www.arrow.com/en/products/ep1c3t100c8n/intel?region=nac
footprint QFP50P1600X1600X120-100N
pins: 1 IO_1, 2 IO_2, 3 IO_3, 4 IO_4, 5 IO_5, 6 IO_6, 7 DATA0, 8 NCONFIG, 9 VCCA_PLL1, 10 CLK0, 11 GNDA_PLL1, 12 NCEO, 13 NCE, 14 MSEL0, 15 MSEL1, 16 DCLK, 17 IO_7, 18 VCCIO1, 19 GND_1, 20 IO_8, 21 IO_9, 22 IO_10, 23 IO_11, 24 IO_12, 25 IO_13, 26 IO_14, 27 IO_15, 28 IO_16, 29 IO_17, 30 GND_2, 31 VCCIO4_1, 32 GND_3, 33 VCCINT_1, 34 IO_18, 35 IO_19, 36 IO_20, 37 IO_21, 38 IO_22, 39 IO_23, 40 IO_24, 41 IO_25, 42 IO_26, 43 GND_4, 44 VCCINT_2, 45 GND_5, 46 VCCIO4_2, 47 IO_27, 48 IO_28, 49 IO_29, 50 IO_30, 51 IO_31, 52 IO_32, 53 IO_33, 54 IO_34, 55 IO_35, 56 IO_36, 57 IO_37, 58 GND_6, 59 VCCIO3, 60 CONF_DONE, 61 NSTATUS, 62 TCK, 63 TMS, 64 TDO, 65 IO_38, 66 CLK2, 67 TDI, 68 IO_39, 69 IO_40, 70 IO_41, 71 IO_42, 72 IO_43, 73 IO_44, 74 IO_45, 75 IO_46, 76 IO_47, 77 IO_48, 78 IO_49, 79 IO_50, 80 VCCIO2_1, 81 GND_7, 82 VCCINT_3, 83 GND_8, 84 IO_51, 85 IO_52, 86 IO_53, 87 IO_54, 88 IO_55, 89 IO_56, 90 IO_57, 91 IO_58, 92 IO_59, 93 VCCINT_4, 94 GND_9, 95 VCCIO2_2, 96 GND_10, 97 IO_60, 98 IO_61, 99 IO_62, 100 IO_63

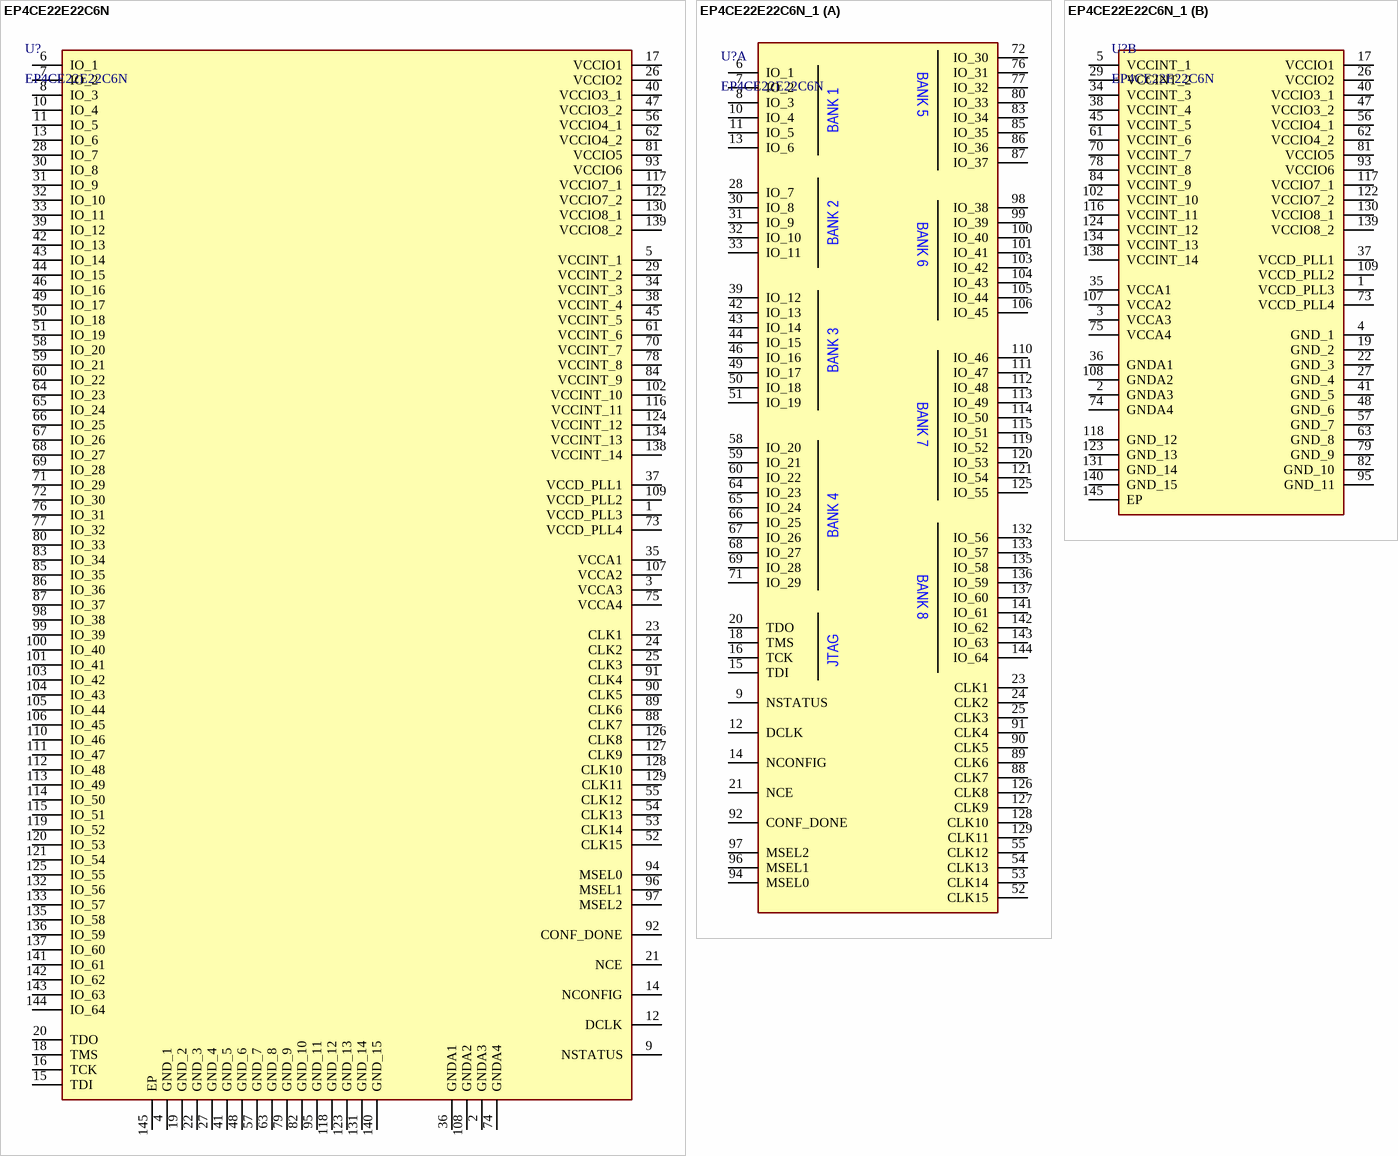
[diagram p15: symbols EP4CE22E22C6N to EP4CE22E22C6N_1]

## EP4CE22E22C6N
designator U?
IC FPGA 79 I/O 144EQFP; Manufacturer_Name: Intel; Datasheet Link: https://www.intel.com/content/dam/www/programmable/us/en/pdfs/literature/packaging/04r00485-02.pdf; Height: 1.65mm; Manufacturer_Part_Number: EP4CE22E22C6N; Mouser Part Number: 989-EP4CE22E22C6N; Mouser Price/Stock: https://www.mouser.co.uk/ProductDetail/Intel-Altera/EP4CE22E22C6N?qs=jblrfmjbeiGU1x21hO7i%252BQ%3D%3D; Arrow Part Number: EP4CE22E22C6N; Arrow Price/Stock: https://www.arrow.com/en/products/ep4ce22e22c6n/intel
footprint QFP50P2200X2200X165-145N
pins: 1 VCCD_PLL3, 2 GNDA3, 3 VCCA3, 4 GND_1, 5 VCCINT_1, 6 IO_1, 7 IO_2, 8 IO_3, 9 NSTATUS, 10 IO_4, 11 IO_5, 12 DCLK, 13 IO_6, 14 NCONFIG, 15 TDI, 16 TCK, 17 VCCIO1, 18 TMS, 19 GND_2, 20 TDO, 21 NCE, 22 GND_3, 23 CLK1, 24 CLK2, 25 CLK3, 26 VCCIO2, 27 GND_4, 28 IO_7, 29 VCCINT_2, 30 IO_8, 31 IO_9, 32 IO_10, 33 IO_11, 34 VCCINT_3, 35 VCCA1, 36 GNDA1, 37 VCCD_PLL1, 38 VCCINT_4, 39 IO_12, 40 VCCIO3_1, 41 GND_5, 42 IO_13, 43 IO_14, 44 IO_15, 45 VCCINT_5, 46 IO_16, 47 VCCIO3_2, 48 GND_6, 49 IO_17, 50 IO_18, 51 IO_19, 52 CLK15, 53 CLK14, 54 CLK13, 55 CLK12, 56 VCCIO4_1, 57 GND_7, 58 IO_20, 59 IO_21, 60 IO_22, 61 VCCINT_6, 62 VCCIO4_2, 63 GND_8, 64 IO_23, 65 IO_24, 66 IO_25, 67 IO_26, 68 IO_27, 69 IO_28, 70 VCCINT_7, 71 IO_29, 72 IO_30, 73 VCCD_PLL4, 74 GNDA4, 75 VCCA4, 76 IO_31, 77 IO_32, 78 VCCINT_8, 79 GND_9, 80 IO_33, 81 VCCIO5, 82 GND_10, 83 IO_34, 84 VCCINT_9, 85 IO_35, 86 IO_36, 87 IO_37, 88 CLK7, 89 CLK6, 90 CLK5, 91 CLK4, 92 CONF_DONE, 93 VCCIO6, 94 MSEL0, 95 GND_11, 96 MSEL1, 97 MSEL2, 98 IO_38, 99 IO_39, 100 IO_40, 101 IO_41, 102 VCCINT_10, 103 IO_42, 104 IO_43, 105 IO_44, 106 IO_45, 107 VCCA2, 108 GNDA2, 109 VCCD_PLL2, 110 IO_46, 111 IO_47, 112 IO_48, 113 IO_49, 114 IO_50, 115 IO_51, 116 VCCINT_11, 117 VCCIO7_1, 118 GND_12, 119 IO_52, 120 IO_53, 121 IO_54, 122 VCCIO7_2, 123 GND_13, 124 VCCINT_12, 125 IO_55, 126 CLK8, 127 CLK9, 128 CLK10, 129 CLK11, 130 VCCIO8_1, 131 GND_14, 132 IO_56, 133 IO_57, 134 VCCINT_13, 135 IO_58, 136 IO_59, 137 IO_60, 138 VCCINT_14, 139 VCCIO8_2, 140 GND_15, 141 IO_61, 142 IO_62, 143 IO_63, 144 IO_64, 145 EP

## EP4CE22E22C6N_1
designator U?, comment EP4CE22E22C6N
IC FPGA 79 I/O 144EQFP; Manufacturer_Name: Intel; Datasheet Link: https://www.intel.com/content/dam/www/programmable/us/en/pdfs/literature/packaging/04r00485-02.pdf; Height: 1.65mm; Manufacturer_Part_Number: EP4CE22E22C6N; Mouser Part Number: 989-EP4CE22E22C6N; Mouser Price/Stock: https://www.mouser.co.uk/ProductDetail/Intel-Altera/EP4CE22E22C6N?qs=jblrfmjbeiGU1x21hO7i%252BQ%3D%3D; Arrow Part Number: EP4CE22E22C6N; Arrow Price/Stock: https://www.arrow.com/en/products/ep4ce22e22c6n/intel
footprint QFP50P2200X2200X165-145N
part A pins: 6 IO_1, 7 IO_2, 8 IO_3, 9 NSTATUS, 10 IO_4, 11 IO_5, 12 DCLK, 13 IO_6, 14 NCONFIG, 15 TDI, 16 TCK, 18 TMS, 20 TDO, 21 NCE, 23 CLK1, 24 CLK2, 25 CLK3, 28 IO_7, 30 IO_8, 31 IO_9, 32 IO_10, 33 IO_11, 39 IO_12, 42 IO_13, 43 IO_14, 44 IO_15, 46 IO_16, 49 IO_17, 50 IO_18, 51 IO_19, 52 CLK15, 53 CLK14, 54 CLK13, 55 CLK12, 58 IO_20, 59 IO_21, 60 IO_22, 64 IO_23, 65 IO_24, 66 IO_25, 67 IO_26, 68 IO_27, 69 IO_28, 71 IO_29, 72 IO_30, 76 IO_31, 77 IO_32, 80 IO_33, 83 IO_34, 85 IO_35, 86 IO_36, 87 IO_37, 88 CLK7, 89 CLK6, 90 CLK5, 91 CLK4, 92 CONF_DONE, 94 MSEL0, 96 MSEL1, 97 MSEL2, 98 IO_38, 99 IO_39, 100 IO_40, 101 IO_41, 103 IO_42, 104 IO_43, 105 IO_44, 106 IO_45, 110 IO_46, 111 IO_47, 112 IO_48, 113 IO_49, 114 IO_50, 115 IO_51, 119 IO_52, 120 IO_53, 121 IO_54, 125 IO_55, 126 CLK8, 127 CLK9, 128 CLK10, 129 CLK11, 132 IO_56, 133 IO_57, 135 IO_58, 136 IO_59, 137 IO_60, 141 IO_61, 142 IO_62, 143 IO_63, 144 IO_64
part B pins: 1 VCCD_PLL3, 2 GNDA3, 3 VCCA3, 4 GND_1, 5 VCCINT_1, 17 VCCIO1, 19 GND_2, 22 GND_3, 26 VCCIO2, 27 GND_4, 29 VCCINT_2, 34 VCCINT_3, 35 VCCA1, 36 GNDA1, 37 VCCD_PLL1, 38 VCCINT_4, 40 VCCIO3_1, 41 GND_5, 45 VCCINT_5, 47 VCCIO3_2, 48 GND_6, 56 VCCIO4_1, 57 GND_7, 61 VCCINT_6, 62 VCCIO4_2, 63 GND_8, 70 VCCINT_7, 73 VCCD_PLL4, 74 GNDA4, 75 VCCA4, 78 VCCINT_8, 79 GND_9, 81 VCCIO5, 82 GND_10, 84 VCCINT_9, 93 VCCIO6, 95 GND_11, 102 VCCINT_10, 107 VCCA2, 108 GNDA2, 109 VCCD_PLL2, 116 VCCINT_11, 117 VCCIO7_1, 118 GND_12, 122 VCCIO7_2, 123 GND_13, 124 VCCINT_12, 130 VCCIO8_1, 131 GND_14, 134 VCCINT_13, 138 VCCINT_14, 139 VCCIO8_2, 140 GND_15, 145 EP
part A text: BANK 5; BANK 1; BANK 2; BANK 6; BANK 3; BANK 7; BANK 4; BANK 8; JTAG

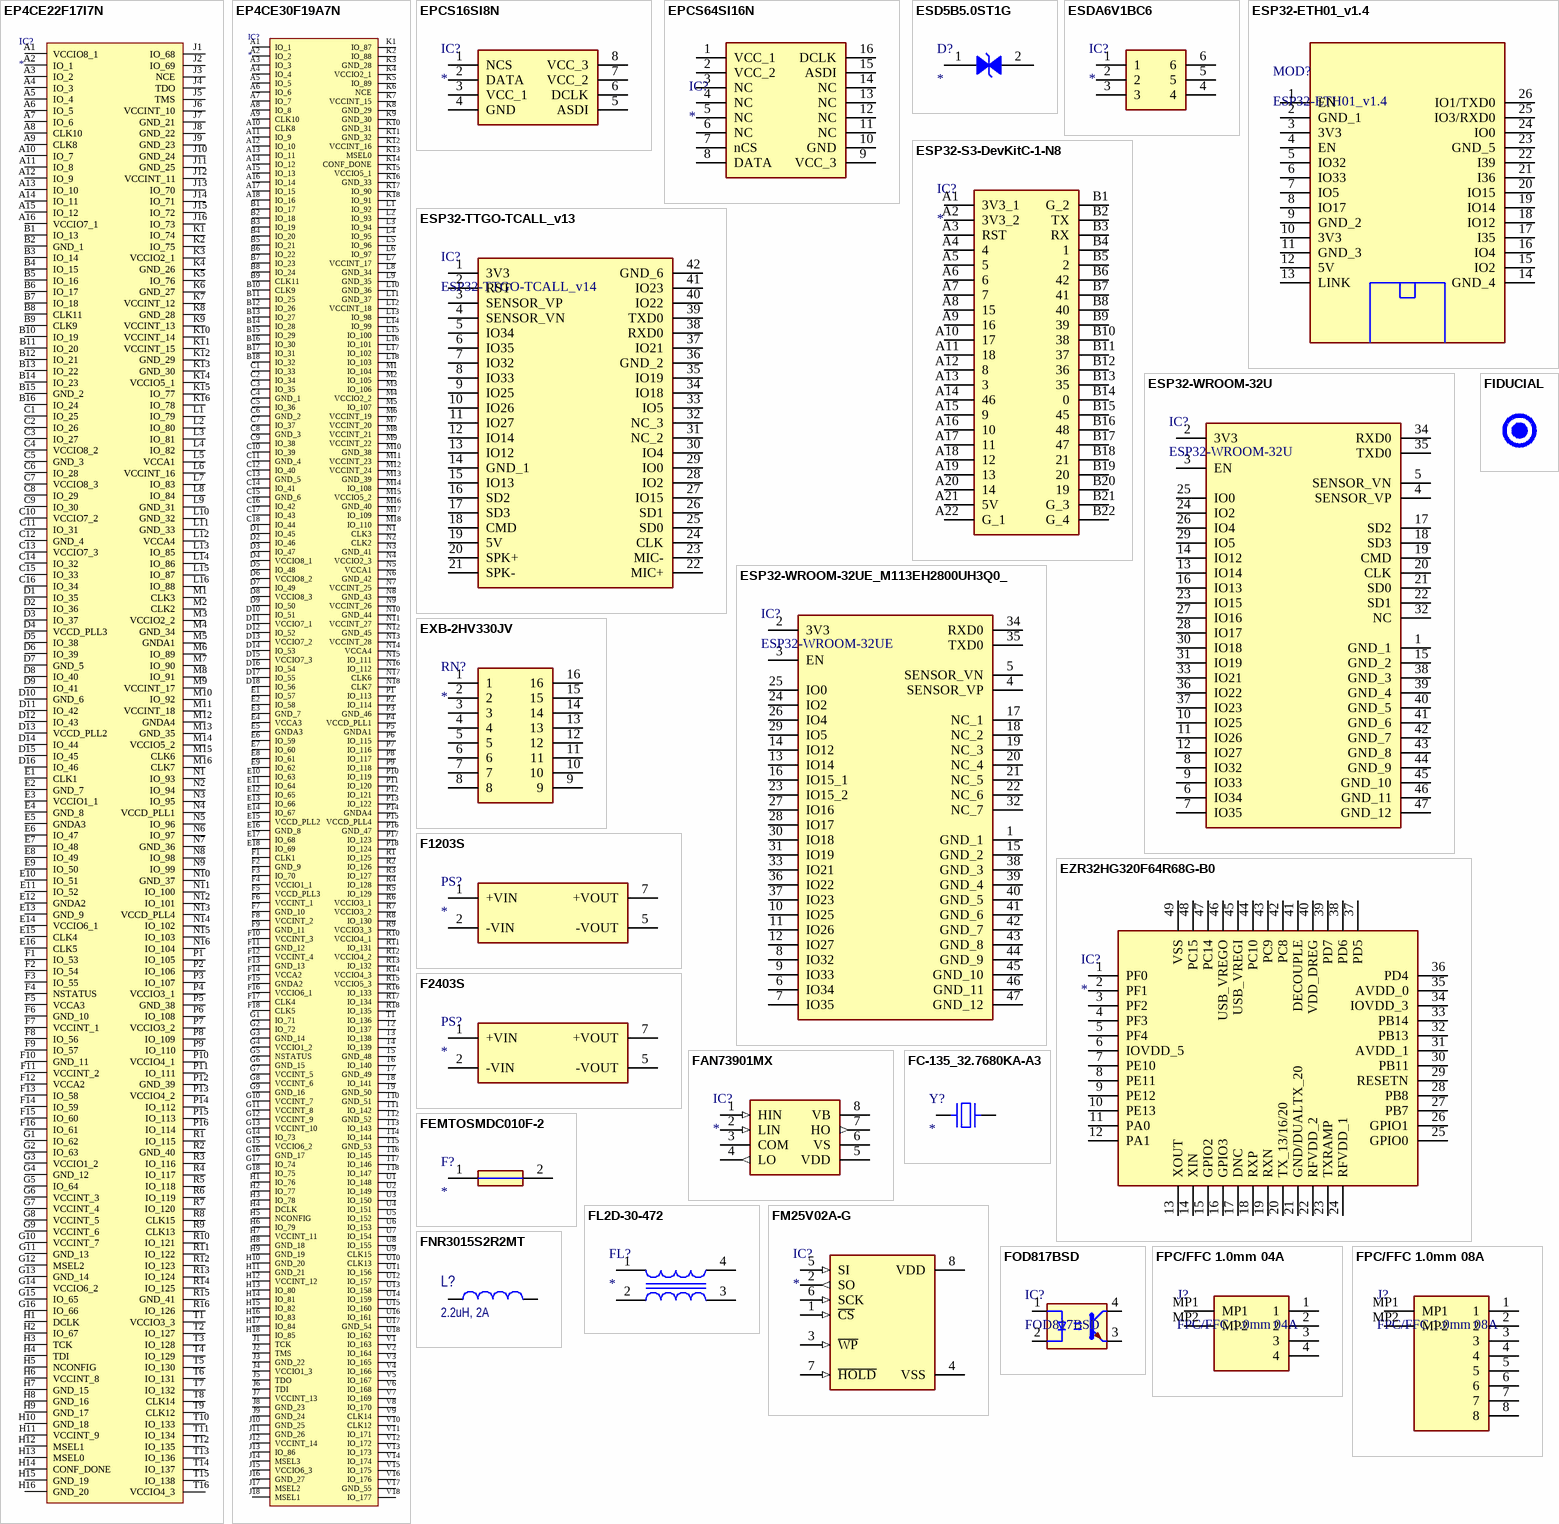
[diagram p16: symbols EP4CE22F17I7N to FPC/FFC 1.0mm 08A]

## EP4CE22F17I7N
designator IC?
Integrated Circuit; Manufacturer_Name: Intel; Manufacturer_Part_Number: EP4CE22F17I7N; Datasheet Link: https://componentsearchengine.com/Datasheets/1/EP4CE22F17I7N.pdf; Height: 1.55mm; Mouser Part Number: 989-EP4CE22F17I7N; Mouser Price/Stock: https://www.mouser.co.uk/ProductDetail/Intel-Altera/EP4CE22F17I7N?qs=jblrfmjbeiH%2FPT5k%2FC0CEQ%3D%3D; Arrow Part Number: EP4CE22F17I7N; Arrow Price/Stock: https://www.arrow.com/en/products/ep4ce22f17i7n/intel?region=nac
footprint BGA256C100P16X16_1700X1700X155
pins: A1 VCCIO8_1, A2 IO_1, A3 IO_2, A4 IO_3, A5 IO_4, A6 IO_5, A7 IO_6, A8 CLK10, A9 CLK8, A10 IO_7, A11 IO_8, A12 IO_9, A13 IO_10, A14 IO_11, A15 IO_12, A16 VCCIO7_1, B1 IO_13, B2 GND_1, B3 IO_14, B4 IO_15, B5 IO_16, B6 IO_17, B7 IO_18, B8 CLK11, B9 CLK9, B10 IO_19, B11 IO_20, B12 IO_21, B13 IO_22, B14 IO_23, B15 GND_2, B16 IO_24, C1 IO_25, C2 IO_26, C3 IO_27, C4 VCCIO8_2, C5 GND_3, C6 IO_28, C7 VCCIO8_3, C8 IO_29, C9 IO_30, C10 VCCIO7_2, C11 IO_31, C12 GND_4, C13 VCCIO7_3, C14 IO_32, C15 IO_33, C16 IO_34, D1 IO_35, D2 IO_36, D3 IO_37, D4 VCCD_PLL3, D5 IO_38, D6 IO_39, D7 GND_5, D8 IO_40, D9 IO_41, D10 GND_6, D11 IO_42, D12 IO_43, D13 VCCD_PLL2, D14 IO_44, D15 IO_45, D16 IO_46, E1 CLK1, E2 GND_7, E3 VCCIO1_1, E4 GND_8, E5 GNDA3, E6 IO_47, E7 IO_48, E8 IO_49, E9 IO_50, E10 IO_51, E11 IO_52, E12 GNDA2, E13 GND_9, E14 VCCIO6_1, E15 CLK4, E16 CLK5, F1 IO_53, F2 IO_54, F3 IO_55, F4 NSTATUS, F5 VCCA3, F6 GND_10, F7 VCCINT_1, F8 IO_56, F9 IO_57, F10 GND_11, F11 VCCINT_2, F12 VCCA2, F13 IO_58, F14 IO_59, F15 IO_60, F16 IO_61, G1 IO_62, G2 IO_63, G3 VCCIO1_2, G4 GND_12, G5 IO_64, G6 VCCINT_3, G7 VCCINT_4, G8 VCCINT_5, G9 VCCINT_6, G10 VCCINT_7, G11 GND_13, G12 MSEL2, G13 GND_14, G14 VCCIO6_2, G15 IO_65, G16 IO_66, H1 DCLK, H2 IO_67, H3 TCK, H4 TDI, H5 NCONFIG, H6 VCCINT_8, H7 GND_15, H8 GND_16, H9 GND_17, H10 GND_18, H11 VCCINT_9, H12 MSEL1, H13 MSEL0, H14 CONF_DONE, H15 GND_19, H16 GND_20, J1 IO_68, J2 IO_69, J3 NCE, J4 TDO, J5 TMS, J6 VCCINT_10, J7 GND_21, J8 GND_22, J9 GND_23, J10 GND_24, J11 GND_25, J12 VCCINT_11, J13 IO_70, J14 IO_71, J15 IO_72, J16 IO_73, K1 IO_74, K2 IO_75, K3 VCCIO2_1, K4 GND_26, K5 IO_76, K6 GND_27, K7 VCCINT_12, K8 GND_28, K9 VCCINT_13, K10 VCCINT_14, K11 VCCINT_15, K12 GND_29, K13 GND_30, K14 VCCIO5_1, K15 IO_77, K16 IO_78, L1 IO_79, L2 IO_80, L3 IO_81, L4 IO_82, L5 VCCA1, L6 VCCINT_16, L7 IO_83, L8 IO_84, L9 GND_31, L10 GND_32, L11 GND_33, L12 VCCA4, L13 IO_85, L14 IO_86, L15 IO_87, L16 IO_88, M1 CLK3, M2 CLK2, M3 VCCIO2_2, M4 GND_34, M5 GNDA1, M6 IO_89, M7 IO_90, M8 IO_91, M9 VCCINT_17, M10 IO_92, M11 VCCINT_18, M12 GNDA4, M13 GND_35, M14 VCCIO5_2, M15 CLK6, M16 CLK7, N1 IO_93, N2 IO_94, N3 IO_95, N4 VCCD_PLL1, N5 IO_96, N6 IO_97, N7 GND_36, N8 IO_98, N9 IO_99, N10 GND_37, N11 IO_100, N12 IO_101, N13 VCCD_PLL4, N14 IO_102, N15 IO_103, N16 IO_104, P1 IO_105, P2 IO_106, P3 IO_107, P4 VCCIO3_1, P5 GND_38, P6 IO_108, P7 VCCIO3_2, P8 IO_109, P9 IO_110, P10 VCCIO4_1, P11 IO_111, P12 GND_39, P13 VCCIO4_2, P14 IO_112, P15 IO_113, P16 IO_114, R1 IO_115, R2 GND_40, R3 IO_116, R4 IO_117, R5 IO_118, R6 IO_119, R7 IO_120, R8 CLK15, R9 CLK13, R10 IO_121, R11 IO_122, R12 IO_123, R13 IO_124, R14 IO_125, R15 GND_41, R16 IO_126, T1 VCCIO3_3, T2 IO_127, T3 IO_128, T4 IO_129, T5 IO_130, T6 IO_131, T7 IO_132, T8 CLK14, T9 CLK12, T10 IO_133, T11 IO_134, T12 IO_135, T13 IO_136, T14 IO_137, T15 IO_138, T16 VCCIO4_3

## EP4CE30F19A7N
designator IC?
Integrated Circuit; Manufacturer_Name: Intel; Manufacturer_Part_Number: EP4CE30F19A7N; Datasheet Link: https://www.intel.com/content/dam/www/programmable/us/en/pdfs/literature/hb/cyclone-iv/cyiv-53001.pdf; Height: 1.9mm; Mouser Part Number: 989-EP4CE30F19A7N; Mouser Price/Stock: https://www.mouser.co.uk/ProductDetail/Intel-Altera/EP4CE30F19A7N?qs=TN6zvtaX%252BaO%252Bzz8OzstL2w%3D%3D; Arrow Part Number: EP4CE30F19A7N; Arrow Price/Stock: https://www.arrow.com/en/products/ep4ce30f19a7n/intel?region=nac
footprint BGA324C100P18X18_1900X1900X190
pins: A1 IO_1, A2 IO_2, A3 IO_3, A4 IO_4, A5 IO_5, A6 IO_6, A7 IO_7, A8 IO_8, A9 CLK10, A10 CLK8, A11 IO_9, A12 IO_10, A13 IO_11, A14 IO_12, A15 IO_13, A16 IO_14, A17 IO_15, A18 IO_16, B1 IO_17, B2 IO_18, B3 IO_19, B4 IO_20, B5 IO_21, B6 IO_22, B7 IO_23, B8 IO_24, B9 CLK11, B10 CLK9, B11 IO_25, B12 IO_26, B13 IO_27, B14 IO_28, B15 IO_29, B16 IO_30, B17 IO_31, B18 IO_32, C1 IO_33, C2 IO_34, C3 IO_35, C4 GND_1, C5 IO_36, C6 GND_2, C7 IO_37, C8 GND_3, C9 IO_38, C10 IO_39, C11 GND_4, C12 IO_40, C13 GND_5, C14 IO_41, C15 GND_6, C16 IO_42, C17 IO_43, C18 IO_44, D1 IO_45, D2 IO_46, D3 IO_47, D4 VCCIO8_1, D5 IO_48, D6 VCCIO8_2, D7 IO_49, D8 VCCIO8_3, D9 IO_50, D10 IO_51, D11 VCCIO7_1, D12 IO_52, D13 VCCIO7_2, D14 IO_53, D15 VCCIO7_3, D16 IO_54, D17 IO_55, D18 IO_56, E1 IO_57, E2 IO_58, E3 GND_7, E4 VCCA3, E5 GNDA3, E6 IO_59, E7 IO_60, E8 IO_61, E9 IO_62, E10 IO_63, E11 IO_64, E12 IO_65, E13 IO_66, E14 IO_67, E15 VCCD_PLL2, E16 GND_8, E17 IO_68, E18 IO_69, F1 CLK1, F2 GND_9, F3 IO_70, F4 VCCIO1_1, F5 VCCD_PLL3, F6 VCCINT_1, F7 GND_10, F8 VCCINT_2, F9 GND_11, F10 VCCINT_3, F11 GND_12, F12 VCCINT_4, F13 GND_13, F14 VCCA2, F15 GNDA2, F16 VCCIO6_1, F17 CLK4, F18 CLK5, G1 IO_71, G2 IO_72, G3 GND_14, G4 VCCIO1_2, G5 NSTATUS, G6 GND_15, G7 VCCINT_5, G8 VCCINT_6, G9 GND_16, G10 VCCINT_7, G11 VCCINT_8, G12 VCCINT_9, G13 VCCINT_10, G14 IO_73, G15 VCCIO6_2, G16 GND_17, G17 IO_74, G18 IO_75, H1 IO_76, H2 IO_77, H3 IO_78, H4 DCLK, H5 NCONFIG, H6 IO_79, H7 VCCINT_11, H8 GND_18, H9 GND_19, H10 GND_20, H11 GND_21, H12 VCCINT_12, H13 IO_80, H14 IO_81, H15 IO_82, H16 IO_83, H17 IO_84, H18 IO_85, J1 TCK, J2 TMS, J3 GND_22, J4 VCCIO1_3, J5 TDO, J6 TDI, J7 VCCINT_13, J8 GND_23, J9 GND_24, J10 GND_25, J11 GND_26, J12 VCCINT_14, J13 IO_86, J14 MSEL3, J15 VCCIO6_3, J16 GND_27, J17 MSEL2, J18 MSEL1, K1 IO_87, K2 IO_88, K3 GND_28, K4 VCCIO2_1, K5 IO_89, K6 NCE, K7 VCCINT_15, K8 GND_29, K9 GND_30, K10 GND_31, K11 GND_32, K12 VCCINT_16, K13 MSEL0, K14 CONF_DONE, K15 VCCIO5_1, K16 GND_33, K17 IO_90, K18 IO_91, L1 IO_92, L2 IO_93, L3 IO_94, L4 IO_95, L5 IO_96, L6 IO_97, L7 VCCINT_17, L8 GND_34, L9 GND_35, L10 GND_36, L11 GND_37, L12 VCCINT_18, L13 IO_98, L14 IO_99, L15 IO_100, L16 IO_101, L17 IO_102, L18 IO_103, M1 IO_104, M2 IO_105, M3 IO_106, M4 VCCIO2_2, M5 IO_107, M6 VCCINT_19, M7 VCCINT_20, M8 VCCINT_21, M9 VCCINT_22, M10 GND_38, M11 VCCINT_23, M12 VCCINT_24, M13 GND_39, M14 IO_108, M15 VCCIO5_2, M16 GND_40, M17 IO_109, M18 IO_110, N1 CLK3, N2 CLK2, N3 GND_41, N4 VCCIO2_3, N5 VCCA1, N6 GND_42, N7 VCCINT_25, N8 GND_43, N9 VCCINT_26, N10 GND_44, N11 VCCINT_27, N12 GND_45, N13 VCCINT_28, N14 VCCA4, N15 IO_111, N16 IO_112, N17 CLK6, N18 CLK7, P1 IO_113, P2 IO_114, P3 GND_46, P4 VCCD_PLL1, P5 GNDA1, P6 IO_115, P7 IO_116, P8 IO_117, P9 IO_118, P10 IO_119, P11 IO_120, P12 IO_121, P13 IO_122, P14 GNDA4, P15 VCCD_PLL4, P16 GND_47, P17 IO_123, P18 IO_124, R1 IO_125, R2 IO_126, R3 IO_127, R4 IO_128, R5 IO_129, R6 VCCIO3_1, R7 VCCIO3_2, R8 IO_130, R9 VCCIO3_3, R10 VCCIO4_1, R11 IO_131, R12 VCCIO4_2, R13 IO_132, R14 VCCIO4_3, R15 VCCIO5_3, R16 IO_133, R17 IO_134, R18 IO_135, T1 IO_136, T2 IO_137, T3 IO_138, T4 IO_139, T5 GND_48, T6 IO_140, T7 GND_49, T8 IO_141, T9 GND_50, T10 GND_51, T11 IO_142, T12 GND_52, T13 IO_143, T14 IO_144, T15 GND_53, T16 IO_145, T17 IO_146, T18 IO_147, U1 IO_148, U2 IO_149, U3 IO_150, U4 IO_151, U5 IO_152, U6 IO_153, U7 IO_154, U8 IO_155, U9 CLK15, U10 CLK13, U11 IO_156, U12 IO_157, U13 IO_158, U14 IO_159, U15 IO_160, U16 IO_161, U17 GND_54, U18 IO_162, V1 IO_163, V2 IO_164, V3 IO_165, V4 IO_166, V5 IO_167, V6 IO_168, V7 IO_169, V8 IO_170, V9 CLK14, V10 CLK12, V11 IO_171, V12 IO_172, V13 IO_173, V14 IO_174, V15 IO_175, V16 IO_176, V17 GND_55, V18 IO_177

## EPCS16SI8N
designator IC?
Integrated Circuit; Manufacturer_Name: Intel; Manufacturer_Part_Number: EPCS16SI8N; Datasheet Link: https://www.altera.com/content/dam/altera-www/global/en_US/pdfs/literature/hb/cfg/cyc_c51014.pdf; Height: 1.75mm; Mouser Part Number: 989-EPCS16SI8N; Mouser Price/Stock: https://www.mouser.co.uk/ProductDetail/Intel-Altera/EPCS16SI8N?qs=jblrfmjbeiGHe8tBSE23uQ%3D%3D; Arrow Part Number: EPCS16SI8N; Arrow Price/Stock: https://www.arrow.com/en/products/epcs16si8n/intel?region=nac
footprint SOIC127P600X175-8N
pins: 1 NCS, 2 DATA, 3 VCC_1, 4 GND, 5 ASDI, 6 DCLK, 7 VCC_2, 8 VCC_3

## EPCS64SI16N
designator IC?
Integrated Circuit; Manufacturer_Name: Intel; Manufacturer_Part_Number: EPCS16SI8N; Datasheet Link: https://www.altera.com/content/dam/altera-www/global/en_US/pdfs/literature/hb/cfg/cyc_c51014.pdf; Height: 1.75mm; Mouser Part Number: 989-EPCS16SI8N; Mouser Price/Stock: https://www.mouser.co.uk/ProductDetail/Intel-Altera/EPCS16SI8N?qs=jblrfmjbeiGHe8tBSE23uQ%3D%3D; Arrow Part Number: EPCS16SI8N; Arrow Price/Stock: https://www.arrow.com/en/products/epcs16si8n/intel?region=nac
footprint SOIC127P1030X265-16N
pins: 1 VCC_1, 2 VCC_2, 3 NC, 4 NC, 5 NC, 6 NC, 7 nCS, 8 DATA, 9 VCC_3, 10 GND, 11 NC, 12 NC, 13 NC, 14 NC, 15 ASDI, 16 DCLK

## ESD5B5.0ST1G
designator D?
Diode; Manufacturer_Name: onsemi; Manufacturer_Part_Number: ESD5B5.0ST1G; Datasheet Link: http://www.onsemi.com/pub/Collateral/ESD5B5.0ST1-D.PDF; Height: 0.7mm; Mouser Part Number: 863-ESD5B50ST1G; Mouser Price/Stock: https://www.mouser.co.uk/ProductDetail/onsemi/ESD5B5.0ST1G?qs=bTNLGnZZEJg%2Fr8bn3zOMJw%3D%3D; Arrow Part Number: ESD5B5.0ST1G; Arrow Price/Stock: https://www.arrow.com/en/products/esd5b5.0st1g/on-semiconductor?region=nac
footprint SODFL1608X70N
pins: 1 K, 2 A

## ESDA6V1BC6
designator IC?
Integrated Circuit; Manufacturer_Name: STMicroelectronics; Manufacturer_Part_Number: ESDA6V1BC6; Datasheet Link: http://docs-emea.rs-online.com/webdocs/096e/0900766b8096e454.pdf; Height: 1.45mm; Mouser Part Number: 511-ESDA6V1BC6; Mouser Price/Stock: https://www.mouser.co.uk/ProductDetail/STMicroelectronics/ESDA6V1BC6?qs=9PdvrqCL7oAFp2zmpu55Tw%3D%3D; Arrow Part Number: ESDA6V1BC6; Arrow Price/Stock: https://www.arrow.com/en/products/esda6v1bc6/stmicroelectronics?region=nac
footprint SOT95P280X145-6N
pins: 1, 2, 3, 4, 5, 6

## ESP32-ETH01_v1.4
designator MOD?
MODULE ESP32; Manufacturer_Name: Espressif Systems; Manufacturer_Part_Number: ESP32-ETH01_v14
footprint ESP32-ETH01
footprint ESP32-ETH01_REVERSE
pins: 1 EN, 2 GND_1, 3 3V3, 4 EN, 5 IO32, 6 IO33, 7 IO5, 8 IO17, 9 GND_2, 10 3V3, 11 GND_3, 12 5V, 13 LINK, 14 GND_4, 15 IO2, 16 IO4, 17 I35, 18 IO12, 19 IO14, 20 IO15, 21 I36, 22 I39, 23 GND_5, 24 IO0, 25 IO3/RXD0, 26 IO1/TXD0

## ESP32-S3-DevKitC-1-N8
designator IC?
Integrated Circuit; Manufacturer_Name: Espressif Systems; Manufacturer_Part_Number: ESP32-S3-DevKitC-1-N8; Datasheet Link: https://docs.espressif.com/projects/esp-idf/en/latest/esp32s3/hw-reference/esp32s3/user-guide-devkitc-1.html; Height: 7mm; Mouser Part Number: 356-ESP32-S3DVKTC1N8; Mouser Price/Stock: https://www.mouser.co.uk/ProductDetail/Espressif-Systems/ESP32-S3-DevKitC-1-N8?qs=Wj%2FVkw3K%252BMCTHFMHLvA1pQ%3D%3D
footprint ESP32S3DevKitC1N8
pins: A1 3V3_1, A2 3V3_2, A3 RST, A4 4, A5 5, A6 6, A7 7, A8 15, A9 16, A10 17, A11 18, A12 8, A13 3, A14 46, A15 9, A16 10, A17 11, A18 12, A19 13, A20 14, A21 5V, A22 G_1, B1 G_2, B2 TX, B3 RX, B4 1, B5 2, B6 42, B7 41, B8 40, B9 39, B10 38, B11 37, B12 36, B13 35, B14 0, B15 45, B16 48, B17 47, B18 21, B19 20, B20 19, B21 G_3, B22 G_4

## ESP32-TTGO-TCALL_v13
designator IC?, comment ESP32-TTGO-TCALL_v14
MODULE; Manufacturer_Name: Xinyuan-LilyGO; Datasheet Link: https://github.com/Xinyuan-LilyGO/LilyGo-T-Call-SIM800; Height: 3.35mm; Manufacturer_Part_Number: TTGO-TCALL_v14
footprint ESP32WROOM32UE
footprint ESP32WROOM32E
pins: 1 3V3, 2 RST, 3 SENSOR_VP, 4 SENSOR_VN, 5 IO34, 6 IO35, 7 IO32, 8 IO33, 9 IO25, 10 IO26, 11 IO27, 12 IO14, 13 IO12, 14 GND_1, 15 IO13, 16 SD2, 17 SD3, 18 CMD, 19 5V, 20 SPK+, 21 SPK-, 22 MIC+, 23 MIC-, 24 CLK, 25 SD0, 26 SD1, 27 IO15, 28 IO2, 29 IO0, 30 IO4, 31 NC_2, 32 NC_3, 33 IO5, 34 IO18, 35 IO19, 36 GND_2, 37 IO21, 38 RXD0, 39 TXD0, 40 IO22, 41 IO23, 42 GND_6

## ESP32-WROOM-32U
designator IC?
Integrated Circuit; Manufacturer_Name: Espressif Systems; Datasheet Link: https://www.mouser.co.uk/datasheet/2/891/esp32_wroom_32e_esp32_wroom_32ue_datasheet_en-1855879.pdf; Height: 3.35mm; Manufacturer_Part_Number: ESP32-WROOM-32U; Mouser Part Number: N/A; Mouser Price/Stock: https://www.mouser.co.uk/ProductDetail/Espressif-Systems/ESP32-WROOM-32UEM113EH2800UH3Q0?qs=vHuUswq2%252BswmjMZOJoYkgw%3D%3D
footprint ESP32WROOM32UE
footprint ESP32WROOM32E
pins: 1 GND_1, 2 3V3, 3 EN, 4 SENSOR_VP, 5 SENSOR_VN, 6 IO34, 7 IO35, 8 IO32, 9 IO33, 10 IO25, 11 IO26, 12 IO27, 13 IO14, 14 IO12, 15 GND_2, 16 IO13, 17 SD2, 18 SD3, 19 CMD, 20 CLK, 21 SD0, 22 SD1, 23 IO15, 24 IO2, 25 IO0, 26 IO4, 27 IO16, 28 IO17, 29 IO5, 30 IO18, 31 IO19, 32 NC, 33 IO21, 34 RXD0, 35 TXD0, 36 IO22, 37 IO23, 38 GND_3, 39 GND_4, 40 GND_5, 41 GND_6, 42 GND_7, 43 GND_8, 44 GND_9, 45 GND_10, 46 GND_11, 47 GND_12

## ESP32-WROOM-32UE_M113EH2800UH3Q0_
designator IC?, comment ESP32-WROOM-32UE
Integrated Circuit; Manufacturer_Name: Espressif Systems; Manufacturer_Part_Number: ESP32-WROOM-32UE(M113EH2800UH3Q0); Datasheet Link: https://www.mouser.co.uk/datasheet/2/891/esp32_wroom_32e_esp32_wroom_32ue_datasheet_en-1855879.pdf; Height: 3.35mm; Mouser Part Number: N/A; Mouser Price/Stock: https://www.mouser.co.uk/ProductDetail/Espressif-Systems/ESP32-WROOM-32UEM113EH2800UH3Q0?qs=vHuUswq2%252BswmjMZOJoYkgw%3D%3D
footprint ESP32WROOM32UE
footprint ESP32WROOM32E
pins: 1 GND_1, 2 3V3, 3 EN, 4 SENSOR_VP, 5 SENSOR_VN, 6 IO34, 7 IO35, 8 IO32, 9 IO33, 10 IO25, 11 IO26, 12 IO27, 13 IO14, 14 IO12, 15 GND_2, 16 IO15_1, 17 NC_1, 18 NC_2, 19 NC_3, 20 NC_4, 21 NC_5, 22 NC_6, 23 IO15_2, 24 IO2, 25 IO0, 26 IO4, 27 IO16, 28 IO17, 29 IO5, 30 IO18, 31 IO19, 32 NC_7, 33 IO21, 34 RXD0, 35 TXD0, 36 IO22, 37 IO23, 38 GND_3, 39 GND_4, 40 GND_5, 41 GND_6, 42 GND_7, 43 GND_8, 44 GND_9, 45 GND_10, 46 GND_11, 47 GND_12

## EXB-2HV330JV
designator RN?
Resistor Network; Manufacturer_Name: Panasonic; Manufacturer_Part_Number: EXB-2HV330JV; Datasheet Link: https://industrial.panasonic.com/cdbs/www-data/pdf/AOC0000/AOC0000C14.pdf; Mouser Part Number: 667-EXB-2HV330JV; Mouser Price/Stock: https://www.mouser.co.uk/ProductDetail/Panasonic/EXB-2HV330JV?qs=oE3VwAv%2FYtmbx%252BZbUgfrZg%3D%3D; Arrow Part Number: EXB-2HV330JV; Arrow Price/Stock: https://www.arrow.com/en/products/exb-2hv330jv/panasonic?region=nac
footprint EXB2HV_1
pins: 1, 2, 3, 4, 5, 6, 7, 8, 9, 10, 11, 12, 13, 14, 15, 16

## EZR32HG320F64R68G-B0
designator IC?
Integrated Circuit; Manufacturer_Name: Silicon Labs; Manufacturer_Part_Number: EZR32HG320F64R68G-B0; Datasheet Link: https://www.silabs.com/documents/public/data-sheets/EZR32HG320-DataSheet.pdf; Height: 0.9mm; Mouser Part Number: 634-ZR32HG320F64R68G; Mouser Price/Stock: https://www.mouser.com/Search/Refine.aspx?Keyword=634-ZR32HG320F64R68G; Arrow Part Number: EZR32HG320F64R68G-B0; Arrow Price/Stock: https://www.arrow.com/en/products/ezr32hg320f64r68g-b0/silicon-labs
footprint QFN50P700X700X90-49N
pins: 1 PF0, 2 PF1, 3 PF2, 4 PF3, 5 PF4, 6 IOVDD_5, 7 PE10, 8 PE11, 9 PE12, 10 PE13, 11 PA0, 12 PA1, 13 XOUT, 14 XIN, 15 GPIO2, 16 GPIO3, 17 DNC, 18 RXP, 19 RXN, 20 TX_13/16/20, 21 GND/DUALTX_20, 22 RFVDD_2, 23 TXRAMP, 24 RFVDD_1, 25 GPIO0, 26 GPIO1, 27 PB7, 28 PB8, 29 RESETN, 30 PB11, 31 AVDD_1, 32 PB13, 33 PB14, 34 IOVDD_3, 35 AVDD_0, 36 PD4, 37 PD5, 38 PD6, 39 PD7, 40 VDD_DREG, 41 DECOUPLE, 42 PC8, 43 PC9, 44 PC10, 45 USB_VREGI, 46 USB_VREGO, 47 PC14, 48 PC15, 49 VSS

## F1203S
designator PS?
Power Supply; Manufacturer_Name: Mornsun; Manufacturer_Part_Number: F1203S-1WR3; Datasheet Link: https://www.mornsun-power.com/html/pdf/F1203S-1WR3.html; Height: 10.45mm
footprint F_S-1WR3
pins: 1 +VIN, 2 -VIN, 5 -VOUT, 7 +VOUT

## F2403S
designator PS?
Power Supply; Manufacturer_Name: Mornsun; Manufacturer_Part_Number: F2403S-1WR3; Datasheet Link: https://www.mornsun-power.com/html/pdf/F1203S-1WR3.html; Height: 10.45mm
footprint F_S-2WR3
pins: 1 +VIN, 2 -VIN, 5 -VOUT, 7 +VOUT

## FAN73901MX
designator IC?
Integrated Circuit; Manufacturer_Name: onsemi; Manufacturer_Part_Number: FAN73901MX; Datasheet Link: https://rs.componentsearchengine.com/Datasheets/2/FAN73901MX.pdf; Height: 1.8mm; Mouser Part Number: 512-FAN73901MX; Mouser Price/Stock: https://www.mouser.com/Search/Refine.aspx?Keyword=512-FAN73901MX; Arrow Part Number: FAN73901MX; Arrow Price/Stock: https://www.arrow.com/en/products/fan73901mx/on-semiconductor?region=nac
footprint SOIC127P600X180-8N
pins: 1 HIN (in), 2 LIN (in), 3 COM (power), 4 LO (out), 5 VDD (power), 6 VS (power), 7 HO (out), 8 VB (power)

## FC-135_32.7680KA-A3
designator Y?
Crystal or Oscillator; Manufacturer_Name: Epson Timing; Manufacturer_Part_Number: FC-135 32.7680KA-A3; Datasheet Link: https://support.epson.biz/td/api/doc_check.php?dl=brief_FC-135&lang=en; Height: 0.9mm; Mouser Part Number: 732-FC-13532.76KAA3; Mouser Price/Stock: https://www.mouser.co.uk/ProductDetail/Epson-Timing/FC-135-32.7680KA-A0?qs=tC2qD9afNgrMeRwy3OalUw%3D%3D; Arrow Part Number: FC-135 32.7680KA-A3; Arrow Price/Stock: https://www.arrow.com/en/products/fc-13532.7680ka-a0/epson-electronics-america?region=nac
footprint FC135
pins: 1, 2